# Altium integrated library StudentsLibrary.IntLib: 806 symbols (part 7 of 10)
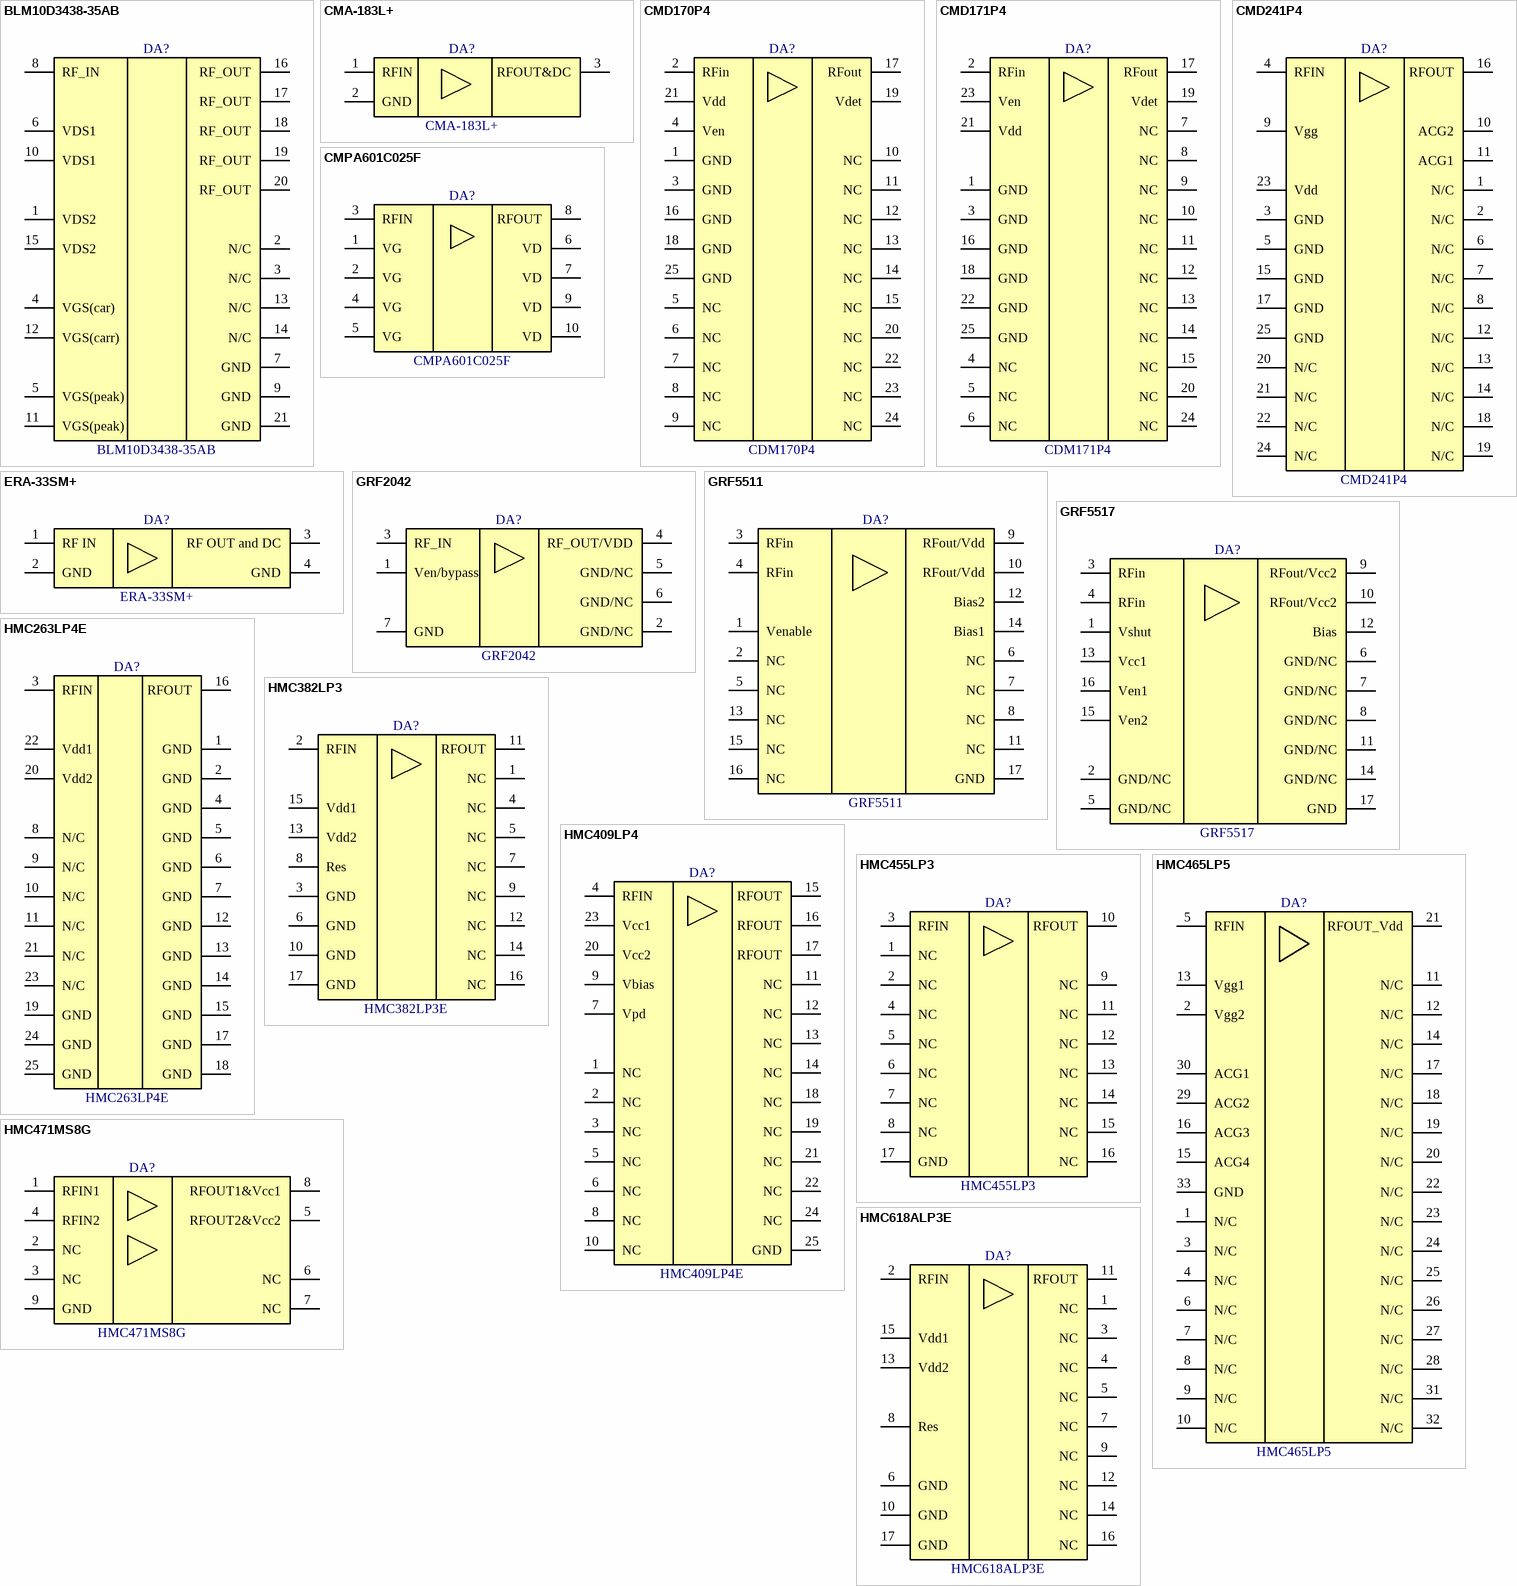
[diagram p53: symbols BLM10D3438-35AB to HMC618ALP3E]

## CMD241P4
designator DA?
2 - 22 GHz (C, X, Ku and K Band) Distributed Amplifier; Manufacturer: Qorvo; PartNumber: CMD241P4; ComponentLink1Description: Product Page; ComponentLink1URL: https://www.qorvo.com/products/p/CMD241P4; ComponentLink2Description: DataSheet; ComponentLink2URL: https://www.qorvo.com/products/d/da007534
footprint QFN25P50_400X400X100L40X24T245N (Quad Flat No-Lead (QFN with Tab), 0.50 mm pitch; square, 6 pin X 6 pin, 4.00 mm L X 4.00 mm W X 1.00 mm H body)
pins: 1 N/C, 2 N/C, 3 GND, 4 RFIN, 5 GND, 6 N/C, 7 N/C, 8 N/C, 9 Vgg, 10 ACG2, 11 ACG1, 12 N/C, 13 N/C, 14 N/C, 15 GND, 16 RFOUT, 17 GND, 18 N/C, 19 N/C, 20 N/C, 21 N/C, 22 N/C, 23 Vdd, 24 N/C, 25 GND

## CMPA601C025F
designator DA?
GaN High Power Amplifier, 40 W 6 - 12 GHz; Manufacturer: MACOM; PartNumber: CMPA601C025F; ComponentLink1Description: ProductPage; ComponentLink1URL: https://www.macom.com/products/product-detail/CMPA601C025; ComponentLink2Description: DataSheet; ComponentLink2URL: https://cdn.macom.com/datasheets/CMPA601C025F.pdf
footprint CMPA601C025F (Flange)
pins: 1 VG, 2 VG, 3 RFIN, 4 VG, 5 VG, 6 VD, 7 VD, 8 RFOUT, 9 VD, 10 VD

## ERA-33SM+
designator DA?
Surface Mount Monolithic Amplifier DC-3 GHz; Manufacturer: Mini-Circuits; PartNumber: ERA-33SM+; ComponentLink1Description: Product Page; ComponentLink1URL: https://www.minicircuits.com/WebStore/dashboard.html?model=ERA-33SM%2B; ComponentLink2Description: DataSheet; ComponentLink2URL: https://www.minicircuits.com/WebStore/dashboardPdf?model=ERA-33SM%2B
footprint WW107 (Mini-Circuits case WW107)
pins: 1 RF IN, 2 GND, 3 RF OUT and DC, 4 GND

## GRF2042
designator DA?
LINEAR GAIN BLOCK WITH BYPASS 0.15 to 6 GHz; Manufacturer: Guerilla RF; PartNumber: GRF2042; ComponentLink1Description: Product Page; ComponentLink1URL: https://www.guerrilla-rf.com/products/detail/sku/GRF2042; ComponentLink2Description: DataSheet; ComponentLink2URL: https://www.guerrilla-rf.com/products/DataSheet?sku=2042&file_name=GRF2042DS.pdf
footprint GRF2042 (DFN 6 1.5x1.5mm Guerilla RF)
pins: 1 Ven/bypass, 2 GND/NC, 3 RF_IN, 4 RF_OUT/VDD, 5 GND/NC, 6 GND/NC, 7 GND

## GRF5511
designator DA?
High Linearity Power Amplifier Tuning Range: 0.7 to 6 GHz; Manufacturer: Guerrilla-RF; ComponentLink1Description: Product Page; ComponentLink1URL: https://www.guerrilla-rf.com/products/detail/sku/GRF5511; PartNumber: GRF5511; ComponentLink2Description: DataSheet; ComponentLink2URL: https://www.guerrilla-rf.com/products/DataSheet?sku=5511&file_name=GRF5511DS.pdf
footprint GRF5511 (Guerrilla-RF 3.0 mm QFN-16)
pins: 1 Venable, 2 NC, 3 RFin, 4 RFin, 5 NC, 6 NC, 7 NC, 8 NC, 9 RFout/Vdd, 10 RFout/Vdd, 11 NC, 12 Bias2, 13 NC, 14 Bias1, 15 NC, 16 NC, 17 GND

## GRF5517
designator DA?
High Linearity Power Amplifier Tuning Range: 1.7 to 1.8 GHz; Manufacturer: Guerrilla-RF; ComponentLink1Description: Product Page; ComponentLink1URL: https://www.guerrilla-rf.com/products/detail/sku/GRF5517; PartNumber: GRF5517; ComponentLink2Description: DataSheet; ComponentLink2URL: https://www.guerrilla-rf.com/products/DataSheet?sku=5517&file_name=GRF5517DS.pdf
footprint GRF5517 (Guerrilla-RF 3.0 mm QFN-16)
pins: 1 Vshut, 2 GND/NC, 3 RFin, 4 RFin, 5 GND/NC, 6 GND/NC, 7 GND/NC, 8 GND/NC, 9 RFout/Vcc2, 10 RFout/Vcc2, 11 GND/NC, 12 Bias, 13 Vcc1, 14 GND/NC, 15 Ven2, 16 Ven1, 17 GND

## HMC263LP4E
designator DA?
GaAs MMIC LOW NOISE AMPLIFIER, 24 - 36 GHz; Manufacturer: Analog Devices; ComponentLink1Description: Product Page; ComponentLink1URL: https://www.analog.com/en/products/hmc263lp4e.html; PartNumber: HMC263LP4E; ComponentLink2Description: DataSheet; ComponentLink2URL: https://www.analog.com/media/en/technical-documentation/data-sheets/hmc263.pdf
footprint QFN25P50_400X400X90L40X25T270N (Quad Flat No-Lead (QFN with Tab), 0.50 mm pitch; square, 6 pin X 6 pin, 4.00 mm L X 4.00 mm W X 0.90 mm H body)
pins: 1 GND, 2 GND, 3 RFIN, 4 GND, 5 GND, 6 GND, 7 GND, 8 N/C, 9 N/C, 10 N/C, 11 N/C, 12 GND, 13 GND, 14 GND, 15 GND, 16 RFOUT, 17 GND, 18 GND, 19 GND, 20 Vdd2, 21 N/C, 22 Vdd1, 23 N/C, 24 GND, 25 GND

## HMC382LP3
designator DA?, comment HMC382LP3E
LOW NOISE AMPLIFIER, 1.7 - 2.2 GHz; Manufacturer: Analog Devices; PartNumber: HMC382LP3E; ComponentLink1Description: Product Page; ComponentLink1URL: https://www.analog.com/en/products/hmc382.html; ComponentLink2Description: DataSheet; ComponentLink2URL: https://www.analog.com/media/en/technical-documentation/data-sheets/hmc382.pdf
footprint QFN17P50_300X300X100L40X24T173N (Quad Flat No-Lead (QFN with Tab), 0.50 mm pitch; square, 4 pin X 4 pin, 3.00 mm L X 3.00 mm W X 1.00 mm H body)
pins: 1 NC, 2 RFIN, 3 GND, 4 NC, 5 NC, 6 GND, 7 NC, 8 Res, 9 NC, 10 GND, 11 RFOUT, 12 NC, 13 Vdd2, 14 NC, 15 Vdd1, 16 NC, 17 GND

## HMC409LP4
designator DA?, comment HMC409LP4E
GaAs InGaP HBT 1 WATT POWER AMPLIFIER, 3.3 - 3.8 GHz; Manufacturer: Analog Devices; PartNumber: HMC409LP4E; ComponentLink1Description: Product Page; ComponentLink1URL: https://www.analog.com/en/products/hmc409.html; ComponentLink2Description: DataSheet; ComponentLink2URL: https://www.analog.com/media/en/technical-documentation/data-sheets/hmc409.pdf
footprint QFN25P50_400X400X100L40X24T280N (Quad Flat No-Lead (QFN with Tab), 0.50 mm pitch; square, 6 pin X 6 pin, 4.00 mm L X 4.00 mm W X 1.00 mm H body)
pins: 1 NC, 2 NC, 3 NC, 4 RFIN, 5 NC, 6 NC, 7 Vpd, 8 NC, 9 Vbias, 10 NC, 11 NC, 12 NC, 13 NC, 14 NC, 15 RFOUT, 16 RFOUT, 17 RFOUT, 18 NC, 19 NC, 20 Vcc2, 21 NC, 22 NC, 23 Vcc1, 24 NC, 25 GND

## HMC455LP3
designator DA?
InGaP HBT ½ Watt High IP3 AMPLIFIER, 1.7 - 2.5 GHz; Manufacturer: Analog Devices; PartNumber: HMC455LP3; ComponentLink1Description: Product Page; ComponentLink1URL: https://www.analog.com/en/products/hmc455.html; ComponentLink2Description: DataSheet; ComponentLink2URL: https://www.analog.com/media/en/technical-documentation/data-sheets/hmc455.pdf
footprint QFN17P50_300X300X100L40X24T173N (Quad Flat No-Lead (QFN with Tab), 0.50 mm pitch; square, 4 pin X 4 pin, 3.00 mm L X 3.00 mm W X 1.00 mm H body)
pins: 1 NC, 2 NC, 3 RFIN, 4 NC, 5 NC, 6 NC, 7 NC, 8 NC, 9 NC, 10 RFOUT, 11 NC, 12 NC, 13 NC, 14 NC, 15 NC, 16 NC, 17 GND

## HMC465LP5
designator DA?
GaAs PHEMT MMIC MODULATOR DRIVER  AMPLIFIER, DC - 20 GHz; Manufacturer: Analog Devices; PartNumber: HMC465LP5; ComponentLink1Description: Product Page; ComponentLink1URL: https://www.analog.com/en/products/hmc465lp5.html; ComponentLink2Description: DataSheet; ComponentLink2URL: https://www.analog.com/media/en/technical-documentation/data-sheets/hmc465.pdf
footprint QFN33P50_500X500X90L40X25T370N (Quad Flat No-Lead (QFN with Tab), 0.50 mm pitch; square, 8 pin X 8 pin, 5.00 mm L X 5.00 mm W X 0.90 mm H body)
pins: 1 N/C, 2 Vgg2, 3 N/C, 4 N/C, 5 RFIN, 6 N/C, 7 N/C, 8 N/C, 9 N/C, 10 N/C, 11 N/C, 12 N/C, 13 Vgg1, 14 N/C, 15 ACG4, 16 ACG3, 17 N/C, 18 N/C, 19 N/C, 20 N/C, 21 RFOUT_Vdd, 22 N/C, 23 N/C, 24 N/C, 25 N/C, 26 N/C, 27 N/C, 28 N/C, 29 ACG2, 30 ACG1, 31 N/C, 32 N/C, 33 GND

## HMC471MS8G
designator DA?
SiGe HBT DUAL CHANNEL GAIN BLOCK MMIC AMPLIFIER, DC - 5 GHz; Manufacturer: Analog Devices; PartNumber: HMC471MS8G; ComponentLink1Description: Product Page; ComponentLink1URL: https://www.analog.com/en/products/hmc471.html; ComponentLink2Description: DataSheet; ComponentLink2URL: https://www.analog.com/media/en/technical-documentation/data-sheets/hmc471.pdf
footprint SOP9P65_300X488X110L60X30T241X178N (Small Outline Pkg (SOP with Tab), 0.65 mm pitch; 8 pin, 3.00 mm L X 3.00 mm W X 1.10 mm H body)
pins: 1 RFIN1, 2 NC, 3 NC, 4 RFIN2, 5 RFOUT2&Vcc2, 6 NC, 7 NC, 8 RFOUT1&Vcc1, 9 GND

## HMC618ALP3E
designator DA?
GaAs SMT pHEMT LOW NOISE AMPLIFIER, 1.2 - 2.2 GHz; Manufacturer: Analog Devices; PartNumber: HMC618ALP3E; ComponentLink1Description: Product Page; ComponentLink1URL: https://www.analog.com/en/products/hmc618a.html; ComponentLink2Description: DataSheet; ComponentLink2URL: https://www.analog.com/media/en/technical-documentation/data-sheets/hmc618a.pdf
footprint QFN17P50_300X300X100L40X24T173N (Quad Flat No-Lead (QFN with Tab), 0.50 mm pitch; square, 4 pin X 4 pin, 3.00 mm L X 3.00 mm W X 1.00 mm H body)
pins: 1 NC, 2 RFIN, 3 NC, 4 NC, 5 NC, 6 GND, 7 NC, 8 Res, 9 NC, 10 GND, 11 RFOUT, 12 NC, 13 Vdd2, 14 NC, 15 Vdd1, 16 NC, 17 GND

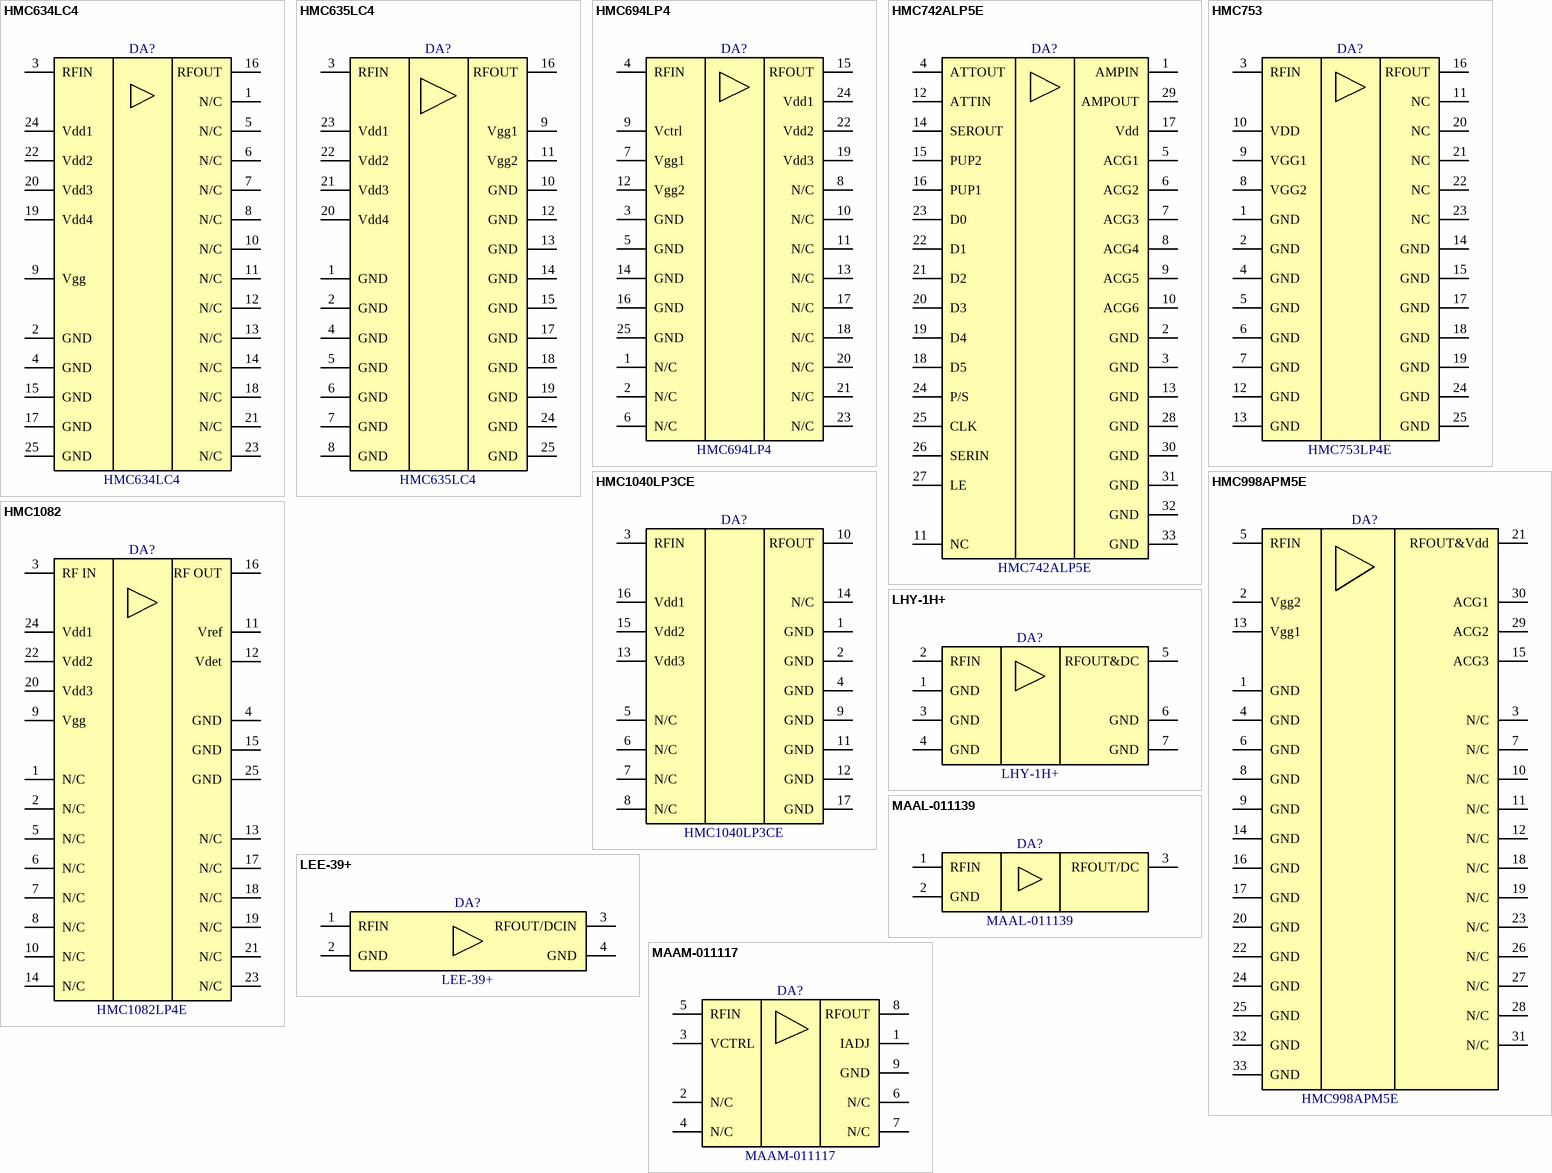
[diagram p29: symbols HMC634LC4 to MAAM-011117]

## HMC634LC4
designator DA?
GaAs PHEMT MMIC DRIVER AMPLIFIER, 5 - 20 GHz; Manufacturer: Analog Devices; PartNumber: HMC634LC4; ComponentLink1Description: Product Page; ComponentLink1URL: https://www.analog.com/en/products/hmc634lc4.html; ComponentLink2Description: DataSheet; ComponentLink2URL: https://www.analog.com/media/en/technical-documentation/data-sheets/hmc634.pdf
footprint QFN25P50_400X400X100L40X24T245N (Quad Flat No-Lead (QFN with Tab), 0.50 mm pitch; square, 6 pin X 6 pin, 4.00 mm L X 4.00 mm W X 1.00 mm H body)
pins: 1 N/C, 2 GND, 3 RFIN, 4 GND, 5 N/C, 6 N/C, 7 N/C, 8 N/C, 9 Vgg, 10 N/C, 11 N/C, 12 N/C, 13 N/C, 14 N/C, 15 GND, 16 RFOUT, 17 GND, 18 N/C, 19 Vdd4, 20 Vdd3, 21 N/C, 22 Vdd2, 23 N/C, 24 Vdd1, 25 GND

## HMC635LC4
designator DA?
GaAs PHEMT MMIC DRIVER AMPLIFIER, 18 - 40 GHz; Manufacturer: Analog Devices; PartNumber: HMC635LC4; ComponentLink1Description: Product Page; ComponentLink1URL: https://www.analog.com/en/products/hmc635lc4.html; ComponentLink2Description: DataSheet; ComponentLink2URL: https://www.analog.com/media/en/technical-documentation/data-sheets/hmc635.pdf
footprint QFN25P50_400X400X100L40X24T260N (Quad Flat No-Lead (QFN with Tab), 0.50 mm pitch; square, 6 pin X 6 pin, 4.00 mm L X 4.00 mm W X 1.00 mm H body)
pins: 1 GND, 2 GND, 3 RFIN, 4 GND, 5 GND, 6 GND, 7 GND, 8 GND, 9 Vgg1, 10 GND, 11 Vgg2, 12 GND, 13 GND, 14 GND, 15 GND, 16 RFOUT, 17 GND, 18 GND, 19 GND, 20 Vdd4, 21 Vdd3, 22 Vdd2, 23 Vdd1, 24 GND, 25 GND

## HMC694LP4
designator DA?
GaAs MMIC ANALOG VARIABLE GAIN AMPLIFIER, 6 - 17 GHz; Manufacturer: Analog Devices; PartNumber: HMC694LP4; ComponentLink1Description: Product Page; ComponentLink1URL: https://www.analog.com/en/products/hmc694lp4.html; ComponentLink2Description: DataSheet; ComponentLink2URL: https://www.analog.com/media/en/technical-documentation/data-sheets/hmc694lp4.pdf
footprint QFN25P50_400X400X100L40X24T280N (Quad Flat No-Lead (QFN with Tab), 0.50 mm pitch; square, 6 pin X 6 pin, 4.00 mm L X 4.00 mm W X 1.00 mm H body)
pins: 1 N/C, 2 N/C, 3 GND, 4 RFIN, 5 GND, 6 N/C, 7 Vgg1, 8 N/C, 9 Vctrl, 10 N/C, 11 N/C, 12 Vgg2, 13 N/C, 14 GND, 15 RFOUT, 16 GND, 17 N/C, 18 N/C, 19 Vdd3, 20 N/C, 21 N/C, 22 Vdd2, 23 N/C, 24 Vdd1, 25 GND

## HMC742ALP5E
designator DA?
0.5 dB LSB GaAs MMIC 6-BIT DIGITAL VARIABLE GAIN AMPLIFIER, 70 MHz - 4 GHz; Manufacturer: Analog Devices; PartNumber: HMC742ALP5E; ComponentLink1Description: Product Page; ComponentLink1URL: https://www.analog.com/en/products/hmc742a.html; ComponentLink2Description: DataSheet; ComponentLink2URL: https://www.analog.com/media/en/technical-documentation/data-sheets/hmc742a.pdf
footprint QFN33P50_500X500X100L40X24T380N (Quad Flat No-Lead (QFN with Tab), 0.50 mm pitch; square, 8 pin X 8 pin, 5.00 mm L X 5.00 mm W X 1.00 mm H body)
pins: 1 AMPIN, 2 GND, 3 GND, 4 ATTOUT, 5 ACG1, 6 ACG2, 7 ACG3, 8 ACG4, 9 ACG5, 10 ACG6, 11 NC, 12 ATTIN, 13 GND, 14 SEROUT, 15 PUP2, 16 PUP1, 17 Vdd, 18 D5, 19 D4, 20 D3, 21 D2, 22 D1, 23 D0, 24 P/S, 25 CLK, 26 SERIN, 27 LE, 28 GND, 29 AMPOUT, 30 GND, 31 GND, 32 GND, 33 GND

## HMC753
designator DA?, comment HMC753LP4E
1 GHz to 11 GHz, GaAs, HEMT, MMIC Low Noise Amplifier; Manufacturer: Analog Devices; PartNumber: HMC753LP4E; ComponentLink1Description: Product Page; ComponentLink1URL: https://www.analog.com/en/products/hmc753.html; ComponentLink2Description: DataSheet; ComponentLink2URL: https://www.analog.com/media/en/technical-documentation/data-sheets/hmc753.pdf
footprint QFN25P50_400X400X95L40X25T270N (Quad Flat No-Lead (QFN with Tab), 0.50 mm pitch; square, 6 pin X 6 pin, 4.00 mm L X 4.00 mm W X 0.95 mm H body)
pins: 1 GND, 2 GND, 3 RFIN, 4 GND, 5 GND, 6 GND, 7 GND, 8 VGG2, 9 VGG1, 10 VDD, 11 NC, 12 GND, 13 GND, 14 GND, 15 GND, 16 RFOUT, 17 GND, 18 GND, 19 GND, 20 NC, 21 NC, 22 NC, 23 NC, 24 GND, 25 GND

## HMC998APM5E
designator DA?
GaAs pHEMT MMIC 2 WATT POWER AMPLIFIER, DC - 22 GHz; Manufacturer: Analog Devices; PartNumber: HMC998APM5E; ComponentLink1Description: Product Page; ComponentLink1URL: https://www.analog.com/en/products/hmc998apm5e.html; ComponentLink2Description: DataSheet; ComponentLink2URL: https://www.analog.com/media/en/technical-documentation/data-sheets/hmc998apm5e.pdf
footprint QFN50P500X500X135_HS-33N (QFN, 32-Leads, Body 5.00x5.00mm, Pitch 0.50mm, Thermal Pad 3.10x3.10mm, IPC Medium Density)
pins: 1 GND, 2 Vgg2, 3 N/C, 4 GND, 5 RFIN, 6 GND, 7 N/C, 8 GND, 9 GND, 10 N/C, 11 N/C, 12 N/C, 13 Vgg1, 14 GND, 15 ACG3, 16 GND, 17 GND, 18 N/C, 19 N/C, 20 GND, 21 RFOUT&Vdd, 22 GND, 23 N/C, 24 GND, 25 GND, 26 N/C, 27 N/C, 28 N/C, 29 ACG2, 30 ACG1, 31 N/C, 32 GND, 33 GND

## HMC1040LP3CE
designator DA?
GaAs pHEMT MMIC LOW NOISE AMPLIFIER, 24 - 43.5 GHz; Manufacturer: Analog Devices; PartNumber: HMC1040LP3CE; ComponentLink1Description: Product Page; ComponentLink1URL: https://www.analog.com/en/products/hmc1040lp3ce.html; ComponentLink2Description: DataSheet; ComponentLink2URL: https://www.analog.com/media/en/technical-documentation/data-sheets/hmc1040.pdf
footprint QFN17P50_300X300X100L40X24T170N (Quad Flat No-Lead (QFN with Tab), 0.50 mm pitch; square, 4 pin X 4 pin, 3.00 mm L X 3.00 mm W X 1.00 mm H body)
pins: 1 GND, 2 GND, 3 RFIN, 4 GND, 5 N/C, 6 N/C, 7 N/C, 8 N/C, 9 GND, 10 RFOUT, 11 GND, 12 GND, 13 Vdd3, 14 N/C, 15 Vdd2, 16 Vdd1, 17 GND

## HMC1082
designator DA?, comment HMC1082LP4E
Power Amplifier 5.5-18 GHz, Gain 22 dB, P1dBout 24 dBm; Manufacturer: Analog Devices; PartNumber: HMC1082LP4E; ComponentLink1Description: Product Page; ComponentLink1URL: https://www.analog.com/en/products/hmc1082.html; ComponentLink2Description: DataSheet; ComponentLink2URL: https://www.analog.com/media/en/technical-documentation/data-sheets/hmc1082.pdf
footprint QFN25P50_400X400X100L40X24T280N (Quad Flat No-Lead (QFN with Tab), 0.50 mm pitch; square, 6 pin X 6 pin, 4.00 mm L X 4.00 mm W X 1.00 mm H body)
pins: 1 N/C, 2 N/C, 3 RF IN, 4 GND, 5 N/C, 6 N/C, 7 N/C, 8 N/C, 9 Vgg, 10 N/C, 11 Vref, 12 Vdet, 13 N/C, 14 N/C, 15 GND, 16 RF OUT, 17 N/C, 18 N/C, 19 N/C, 20 Vdd3, 21 N/C, 22 Vdd2, 23 N/C, 24 Vdd1, 25 GND

## LEE-39+
designator DA?
Monolithic Amplifier DC-8GHz; Manufacturer: Mini-Circuits; PartNumber: LEE-39+; ComponentLink1Description: Product Page; ComponentLink1URL: https://www.minicircuits.com/WebStore/dashboard.html?model=LEE-39%2B; ComponentLink2Description: DataSheet; ComponentLink2URL: https://www.minicircuits.com/WebStore/dashboardPdf?model=LEE-39%2B
footprint FG873 (Mini-Circuits case FG873)
pins: 1 RFIN, 2 GND, 3 RFOUT/DCIN, 4 GND

## LHY-1H+
designator DA?
SMT Linear Amplifier, 50 - 6000 MHz, 50Ω; Manufacturer: Mini-Circuits; PartNumber: LHY-1H+; ComponentLink1Description: Product Page; ComponentLink1URL: https://www.minicircuits.com/WebStore/dashboard.html?model=LHY-1H%2B; ComponentLink2Description: DataSheet; ComponentLink2URL: https://www.minicircuits.com/WebStore/dashboardPdf?model=LHY-1H%2B
footprint MC1630-1 (Mini-Circuits case MC1630-1)
pins: 1 GND, 2 RFIN, 3 GND, 4 GND, 5 RFOUT&DC, 6 GND, 7 GND

## MAAL-011139
designator DA?
Low Noise Amplifier, 5 - 4000 MHz, 75 Ohm, CATV; Manufacturer: MACOM; PartNumber: MAAL-011139; ComponentLink1Description: Product Page; ComponentLink1URL: https://www.macom.com/products/product-detail/MAAL-011139; ComponentLink2Description: DataSheet; ComponentLink2URL: https://cdn.macom.com/datasheets/MAAL-011139.pdf
footprint MAAL-011139 (SOT89, 3-Leads, Body 4,50x2,50mm, Pitch 1,50mm, Lead Span 3,5mm, IPC Medium Density)
pins: 1 RFIN, 2 GND, 3 RFOUT/DC

## MAAM-011117
designator DA?
75 Ω, 5 V RF Amplifier 50 - 2700 MHz; Manufacturer: MACOM; PartNumber: MAAM-011117; ComponentLink1Description: Product Page; ComponentLink1URL: https://www.macom.com/products/product-detail/MAAM-011117; ComponentLink2Description: DataSheet; ComponentLink2URL: https://cdn.macom.com/datasheets/MAAM-011117.pdf
footprint SON50P200X100_HS-9N (SON, 8-Leads, Body 2.00x2.00mm, Pitch 0.50mm, Thermal Pad 1.70x0.79mm, IPC Medium Density)
pins: 1 IADJ, 2 N/C, 3 VCTRL, 4 N/C, 5 RFIN, 6 N/C, 7 N/C, 8 RFOUT, 9 GND

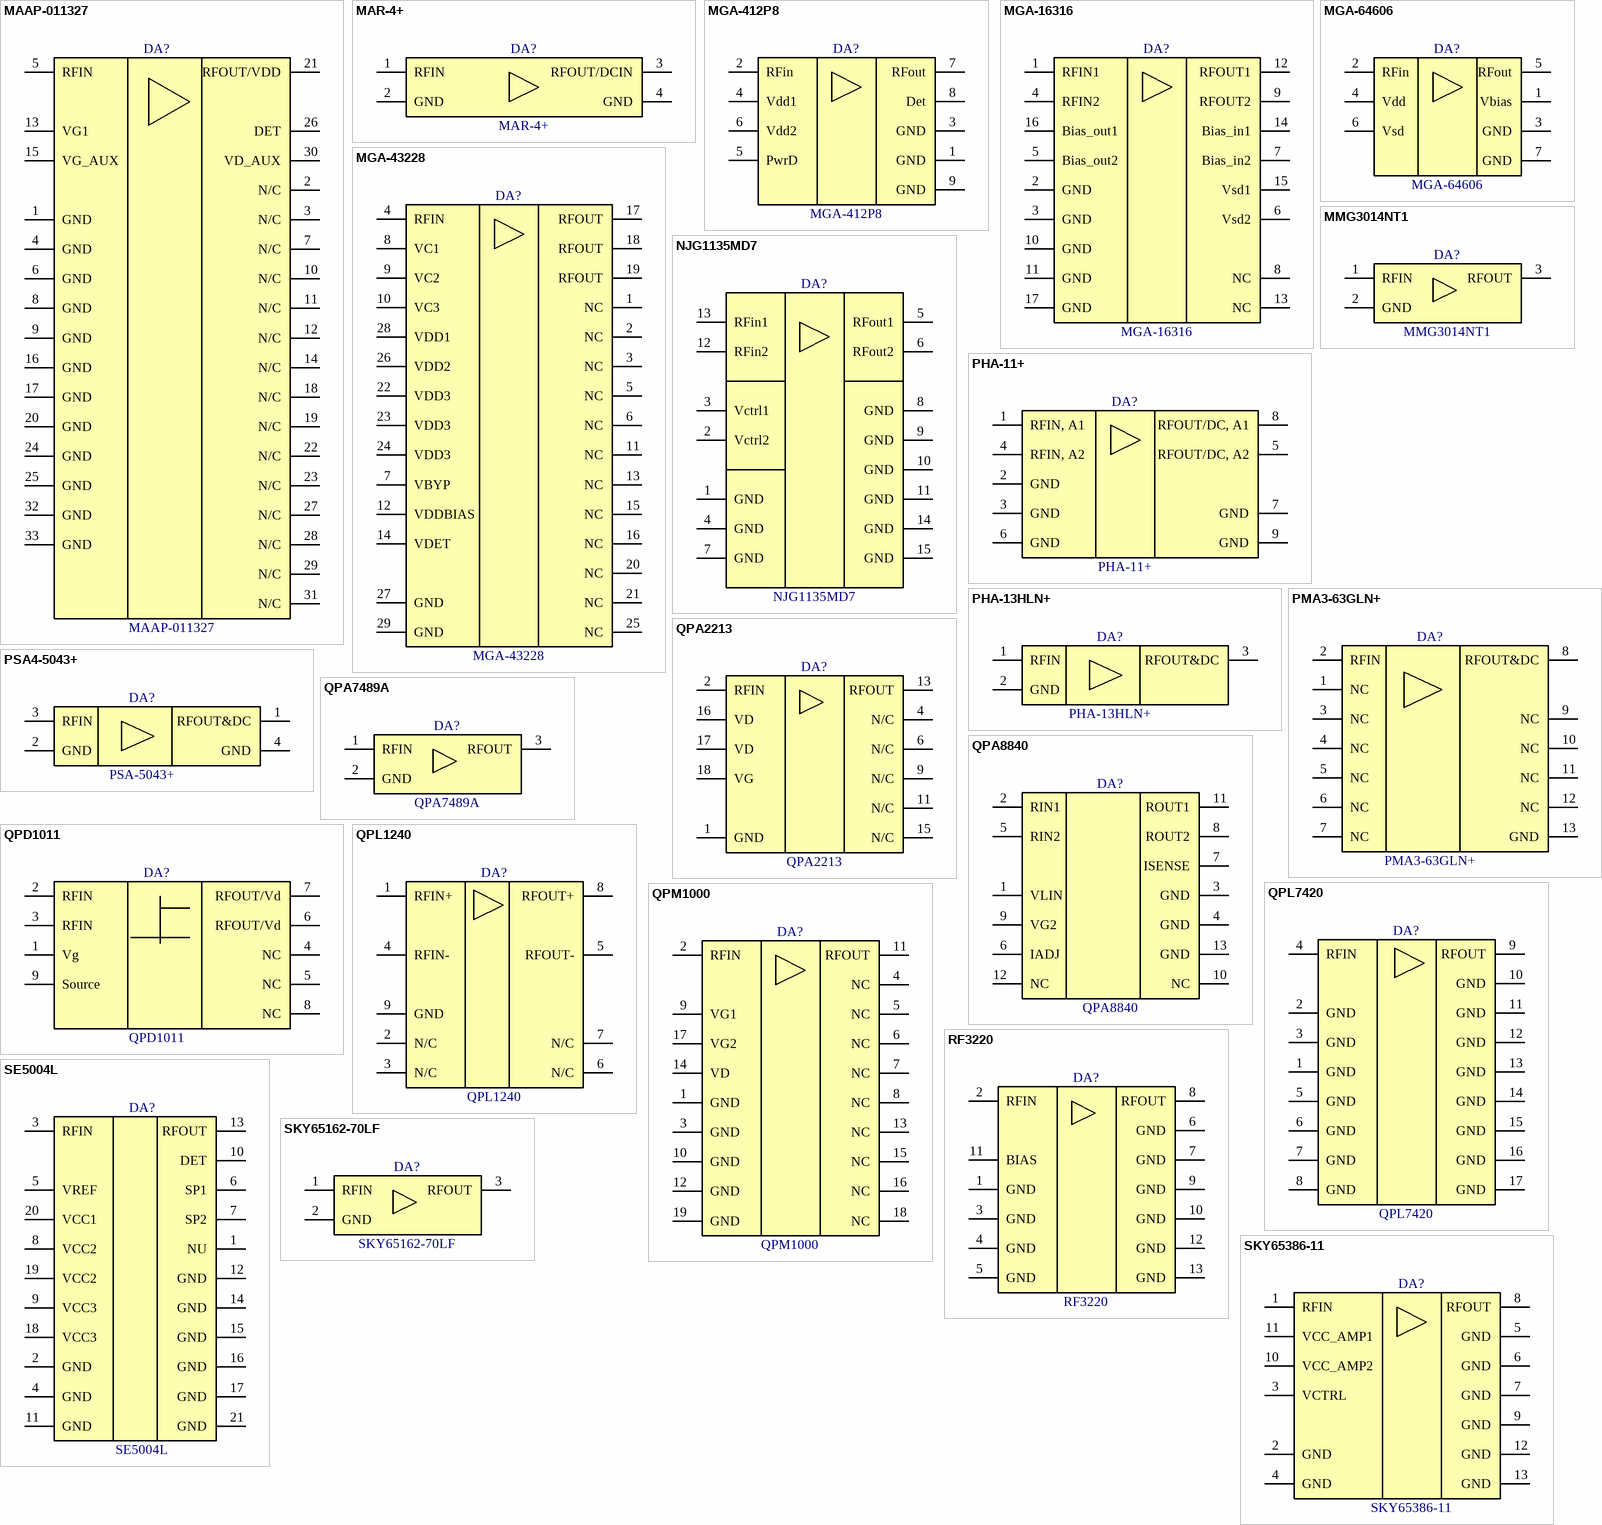
[diagram p30: symbols MAAP-011327 to SKY65386-11]

## MAAP-011327
designator DA?
Power Amplifier, 1 W, 0.001 - 22 GHz; Manufacturer: MACOM; PartNumber: MAAP-011327; ComponentLink1Description: Product Page; ComponentLink1URL: https://www.macom.com/products/product-detail/MAAP-011327; ComponentLink2Description: DataSheet; ComponentLink2URL: https://cdn.macom.com/datasheets/MAAP-011327.pdf
footprint QFN33P50_500X500X120L50X25T300N (Quad Flat No-Lead (QFN with Tab), 0.50 mm pitch; square, 8 pin X 8 pin, 5.00 mm L X 5.00 mm W X 1.20 mm H body)
pins: 1 GND, 2 N/C, 3 N/C, 4 GND, 5 RFIN, 6 GND, 7 N/C, 8 GND, 9 GND, 10 N/C, 11 N/C, 12 N/C, 13 VG1, 14 N/C, 15 VG_AUX, 16 GND, 17 GND, 18 N/C, 19 N/C, 20 GND, 21 RFOUT/VDD, 22 N/C, 23 N/C, 24 GND, 25 GND, 26 DET, 27 N/C, 28 N/C, 29 N/C, 30 VD_AUX, 31 N/C, 32 GND, 33 GND

## MAR-4+
designator DA?
Murata Amplifier DC-1 GHz IP3 25.5 dBm; Manufacturer: Mini-Circuits; PartNumber: MAR-4+; ComponentLink1Description: Product Page; ComponentLink1URL: https://www.minicircuits.com/WebStore/dashboard.html?model=MAR-4%2B; ComponentLink2Description: DataSheet; ComponentLink2URL: https://www.minicircuits.com/WebStore/dashboardPdf?model=MAR-4%2B
footprint MAR-4+ CASE VV105 (Mini-Circuits CASE VV105)
pins: 1 RFIN, 2 GND, 3 RFOUT/DCIN, 4 GND

## MGA-412P8
designator DA?
GaAs Enhancement-mode pHEMT Power Amplifier optimized for IEEE 802.11b/g applications; Manufacturer: Broadcom; PartNumber: MGA-412P8
footprint MGA-412P8 (Small Outline No-Lead (SON with Tab), 0.50 mm pitch; 8 pin, 2.00 mm L X 2.00 mm W X 0.80 mm H body)
pins: 1 GND, 2 RFin, 3 GND, 4 Vdd1, 5 PwrD, 6 Vdd2, 7 RFout, 8 Det, 9 GND

## MGA-16316
designator DA?
Dual LNA for Balanced Application 1950 – 4000 MHz; Manufacturer: Broadcom; PartNumber: MGA-16316
footprint QFN17P65_400X400X95L55X30T210N (Quad Flat No-Lead (QFN with Tab), 0.65 mm pitch; square, 4 pin X 4 pin, 4.00 mm L X 4.00 mm W X 0.95 mm H body)
pins: 1 RFIN1, 2 GND, 3 GND, 4 RFIN2, 5 Bias_out2, 6 Vsd2, 7 Bias_in2, 8 NC, 9 RFOUT2, 10 GND, 11 GND, 12 RFOUT1, 13 NC, 14 Bias_in1, 15 Vsd1, 16 Bias_out1, 17 GND

## MGA-43228
designator DA?
(2.3–2.5) GHz 29dBm High Linearity Wireless Data Power Amplifier; Manufacturer: Broadcom; PartNumber: MGA-43228
footprint QFN29P50_500X500X90L40X25T360N (Quad Flat No-Lead (QFN with Tab), 0.50 mm pitch; square, 7 pin X 7 pin, 5.00 mm L X 5.00 mm W X 0.90 mm H body)
pins: 1 NC, 2 NC, 3 NC, 4 RFIN, 5 NC, 6 NC, 7 VBYP, 8 VC1, 9 VC2, 10 VC3, 11 NC, 12 VDDBIAS, 13 NC, 14 VDET, 15 NC, 16 NC, 17 RFOUT, 18 RFOUT, 19 RFOUT, 20 NC, 21 NC, 22 VDD3, 23 VDD3, 24 VDD3, 25 NC, 26 VDD2, 27 GND, 28 VDD1, 29 GND

## MGA-64606
designator DA?
Low Noise Amplifi er with switchable Bypass/Shutdown Mode in Low Profi le Package; Manufacturer: Broadcom; PartNumber: MGA-64606
footprint PSON7P50_130X200X55L25X25T110N (Pullback Small Outline No-Lead (PSON with Tab), 0.50 mm pitch; 6 pin, 1.30 mm L X 2.00 mm W X 0.55 mm H body)
pins: 1 Vbias, 2 RFin, 3 GND, 4 Vdd, 5 RFout, 6 Vsd, 7 GND

## MMG3014NT1
designator DA?
Heterojunction Bipolar Transistor  Technology (InGaP HBT) Broadband High Linearity Amplifier; Manufacturer: NXP; PartNumber: MMG3014NT1; ComponentLink1Description: Product Page; ComponentLink1URL: https://www.nxp.com/part/MMG3014N#/; ComponentLink2Description: DataSheet; ComponentLink2URL: https://www.nxp.com/docs/en/data-sheet/MMG3014NT1.pdf
footprint SOT89-150P415X160-3N (SOT89, 3-Leads, Body 4.50x2.50mm, Pitch 1.50mm, Lead Span 4.1mm, IPC Medium Density)
pins: 1 RFIN, 2 GND, 3 RFOUT

## NJG1135MD7
designator DA?
Dual Band LNA; Manufacturer: Nisshinbo; PartNumber: NJG1135MD7; ComponentLink1Description: Product Page; ComponentLink1URL: https://www.nisshinbo-microdevices.co.jp/en/products/low-noise-amplifier/spec/?product=njg1135md7; ComponentLink2Description: DataSheet; ComponentLink2URL: https://www.nisshinbo-microdevices.co.jp/en/pdf/datasheet/NJG1135MD7_E.pdf
footprint NJG1135MD7
pins: 1 GND, 2 Vctrl2, 3 Vctrl1, 4 GND, 5 RFout1, 6 RFout2, 7 GND, 8 GND, 9 GND, 10 GND, 11 GND, 12 RFin2, 13 RFin1, 14 GND, 15 GND

## PHA-11+
designator DA?
Dual Matched Amplifier 50Ω .05 to 3 GHz; Manufacturer: Mini-Circuits; PartNumber: PHA-11+; ComponentLink1Description: Product Page; ComponentLink1URL: https://www.minicircuits.com/WebStore/dashboard.html?model=PHA-11%2B; ComponentLink2Description: DataSheet; ComponentLink2URL: https://www.minicircuits.com/WebStore/dashboardPdf?model=PHA-11%2B
footprint DL1020 (Mini-Circuits case DL1020)
pins: 1 RFIN, A1, 2 GND, 3 GND, 4 RFIN, A2, 5 RFOUT/DC, A2, 6 GND, 7 GND, 8 RFOUT/DC, A1, 9 GND

## PHA-13HLN+
designator DA?
Ultra High Dynamic RangeMonolithic Amplifier 50Ω 1MHz to 1 GHz; Manufacturer: Mini-Circuits; PartNumber: PHA-13HLN+; ComponentLink1Description: Product Page; ComponentLink1URL: https://www.minicircuits.com/WebStore/dashboard.html?model=PHA-13LN%2B; ComponentLink2Description: DataSheet; ComponentLink2URL: https://www.minicircuits.com/WebStore/dashboardPdf?model=PHA-13HLN%2B
footprint DF782 (Mini-Circuits case DF782)
pins: 1 RFIN, 2 GND, 3 RFOUT&DC

## PMA3-63GLN+
designator DA?
SMT Low Noise Amplifier, 1800 - 6000 MHz, 50Ω; Manufacturer: Mini-Circuits; PartNumber: PMA3-63GLN+; ComponentLink1Description: Product Page; ComponentLink1URL: https://www.minicircuits.com/WebStore/dashboard.html?model=PMA3-63GLN%2B; ComponentLink2Description: DataSheet; ComponentLink2URL: https://www.minicircuits.com/WebStore/dashboardPdf?model=PMA3-63GLN%2B
footprint QFN13P51_300X300X99L41X23T145N (Quad Flat No-Lead (QFN with Tab), 0.51 mm pitch; square, 3 pin X 3 pin, 3.00 mm L X 3.00 mm W X 0.99 mm H body)
pins: 1 NC, 2 RFIN, 3 NC, 4 NC, 5 NC, 6 NC, 7 NC, 8 RFOUT&DC, 9 NC, 10 NC, 11 NC, 12 NC, 13 GND

## PSA4-5043+
designator DA?, comment PSA-5043+
LOW NOISE, HIGH IP3, Monolithic Amplifier, 50Ω 0.05 to 4 GHz; Manufacturer: Mini-Circuits; PartNumber: PSA-5043+; ComponentLink1Description: Product Page; ComponentLink1URL: https://www.minicircuits.com/WebStore/dashboard.html?model=PSA4-5043%2B; ComponentLink2Description: DataSheet; ComponentLink2URL: https://www.minicircuits.com/WebStore/dashboardPdf?model=PSA4-5043%2B
footprint MMM1362 (Mini-Circuits CASE MMM1362)
pins: 1 RFOUT&DC, 2 GND, 3 RFIN, 4 GND

## QPA2213
designator DA?
2 – 20 GHz 2 Watt GaN Amplifier; Manufacturer: Qorvo; PartNumber: QPA2213; ComponentLink1Description: Product Page; ComponentLink1URL: https://www.qorvo.com/products/p/QPA2213; ComponentLink2Description: DataSheet; ComponentLink2URL: https://www.qorvo.com/products/d/da006580
footprint QPA2213 (Cu Based 4.5x4.5 Lamibate Package)
pins: 1 GND, 2 RFIN, 4 N/C, 6 N/C, 9 N/C, 11 N/C, 13 RFOUT, 15 N/C, 16 VD, 17 VD, 18 VG

## QPA7489A
designator DA?
DC – 3500 MHz Cascadable SiGe HBT Amplifier; Manufacturer: Qorvo; PartNumber: QPA7489A; ComponentLink1Description: Product Page; ComponentLink1URL: https://www.qorvo.com/products/p/QPA7489A; ComponentLink2Description: DataSheet; ComponentLink2URL: https://www.qorvo.com/products/d/da000268
footprint SOT89-150P355X160-3N (SOT89, 3-Leads, Body 4.50x2.50mm, Pitch 1.50mm, Lead Span 3.5mm, IPC Medium Density)
pins: 1 RFIN, 2 GND, 3 RFOUT

## QPA8840
designator DA?
50 - 1800 MHz, 22 dB Gain, 12 V, CATV Amplifier; Manufacturer: Qorvo; PartNumber: QPA8840; ComponentLink1Description: Product Page; ComponentLink1URL: https://www.qorvo.com/products/p/QPA8840; ComponentLink2Description: DataSheet; ComponentLink2URL: https://www.qorvo.com/products/d/da008264
footprint QPA8840 (SON, 12-Leads, Body 6.00x6.00mm, Pitch 1.00mm, Thermal Pad 5.30x4.35mm, IPC Medium Density)
pins: 1 VLIN, 2 RIN1, 3 GND, 4 GND, 5 RIN2, 6 IADJ, 7 ISENSE, 8 ROUT2, 9 VG2, 10 NC, 11 ROUT1, 12 NC, 13 GND

## QPD1011
designator DA?
30 – 1200 MHz, 50 V, 7 W GaN RF Input-Matched Transistor; Manufacturer: Qorvo; PartNumber: QPD1011; ComponentLink1Description: Product Page; ComponentLink1URL: https://www.qorvo.com/products/p/QPD1011; ComponentLink2Description: DataSheet; ComponentLink2URL: https://www.qorvo.com/products/d/da006136
footprint SON9P127_500X600X90L59X63T444X396N (Small Outline No-Lead (SON with Tab), 1.27 mm pitch; 8 pin, 5.00 mm L X 6.00 mm W X 0.90 mm H body)
pins: 1 Vg, 2 RFIN, 3 RFIN, 4 NC, 5 NC, 6 RFOUT/Vd, 7 RFOUT/Vd, 8 NC, 9 Source

## QPL1240
designator DA?
5 - 1218 MHz, 17 dB Gain Differential CATV Amplifier; Manufacturer: Qorvo; PartNumber: QPL1240; ComponentLink1Description: Product Page; ComponentLink1URL: https://www.qorvo.com/products/p/QPL1240; ComponentLink2Description: DataSheet; ComponentLink2URL: https://www.qorvo.com/products/d/da008515
footprint SOIC9P127_490X600X173L75X42T330X240N (Small Outline IC (SOIC with Tab), 1.27 mm pitch; 8 pin, 4.90 mm L X 3.905 mm W X 1.73 mm H body)
pins: 1 RFIN+, 2 N/C, 3 N/C, 4 RFIN-, 5 RFOUT-, 6 N/C, 7 N/C, 8 RFOUT+, 9 GND

## QPL7420
designator DA?
75 Ω 20 dB CATV Amplifier 5 – 1800 MHz; Manufacturer: Qorvo; PartNumber: QPL7420; ComponentLink1Description: Product Page; ComponentLink1URL: https://www.qorvo.com/products/p/QPL7420; ComponentLink2Description: DataSheet; ComponentLink2URL: https://www.qorvo.com/products/d/da008608
footprint QFN17P50_300X300X90L30X25T170N (Quad Flat No-Lead (QFN with Tab), 0.50 mm pitch; square, 4 pin X 4 pin, 3.00 mm L X 3.00 mm W X 0.90 mm H body)
pins: 1 GND, 2 GND, 3 GND, 4 RFIN, 5 GND, 6 GND, 7 GND, 8 GND, 9 RFOUT, 10 GND, 11 GND, 12 GND, 13 GND, 14 GND, 15 GND, 16 GND, 17 GND

## QPM1000
designator DA?
2 -20 GHz Limiter/Low-Noise Amplifier; Manufacturer: Qorvo; PartNumber: QPM1000; ComponentLink1Description: Product Page; ComponentLink1URL: https://www.qorvo.com/products/p/QPM1000; ComponentLink2Description: DataSheet; ComponentLink2URL: https://www.qorvo.com/products/d/da003672
footprint QPM1000
pins: 1 GND, 2 RFIN, 3 GND, 4 NC, 5 NC, 6 NC, 7 NC, 8 NC, 9 VG1, 10 GND, 11 RFOUT, 12 GND, 13 NC, 14 VD, 15 NC, 16 NC, 17 VG2, 18 NC, 19 GND

## RF3220
designator DA?
LOW NOISE, LINEAR AMPLIFIER  HIGH LINEARITY/DRIVER AMPLIFIER; Manufacturer: Qorvo; PartNumber: RF3220; ComponentLink1Description: Product Page; ComponentLink1URL: https://www.qorvo.com/products/p/RF3220; ComponentLink2Description: DataSheet; ComponentLink2URL: https://www.qorvo.com/products/d/da000424
footprint RF3220 (RFMD RF3220)
pins: 1 GND, 2 RFIN, 3 GND, 4 GND, 5 GND, 6 GND, 7 GND, 8 RFOUT, 9 GND, 10 GND, 11 BIAS, 12 GND, 13 GND

## SE5004L
designator DA?
5 GHz, 26dBm Power Amplifier with Power Detector; Manufacturer: Skyworks; PartNumber: SE5004L; ComponentLink1Description: Product Page; ComponentLink1URL: https://www.skyworksinc.com/en/Products/Amplifiers/SE5004L; ComponentLink2Description: DataSheet; ComponentLink2URL: https://www.skyworksinc.com/-/media/SkyWorks/Documents/Products/601-700/SE5004L_202393B.pdf
footprint QFN21P50_400X400X90L50X25T250N (Quad Flat No-Lead (QFN with Tab), 0.50 mm pitch; square, 5 pin X 5 pin, 4.00 mm L X 4.00 mm W X 0.90 mm H body)
pins: 1 NU, 2 GND, 3 RFIN, 4 GND, 5 VREF, 6 SP1, 7 SP2, 8 VCC2, 9 VCC3, 10 DET, 11 GND, 12 GND, 13 RFOUT, 14 GND, 15 GND, 16 GND, 17 GND, 18 VCC3, 19 VCC2, 20 VCC1, 21 GND

## SKY65162-70LF
designator DA?
400-2700 MHz Linear Power Amplifier; Manufacturer: Skyworks; PartNumber: SKY65162-70LF; ComponentLink1Description: Product Page; ComponentLink1URL: https://www.skyworksinc.com/en/Products/Amplifiers/SKY65162-70LF; ComponentLink2Description: DataSheet; ComponentLink2URL: https://www.skyworksinc.com/-/media/SkyWorks/Documents/Products/401-500/SKY65162_70LF_201212K.pdf
footprint DPAK4P150_409X160L104X55T250X175N (DPAK, 1.50 mm pitch; 3 pin, 2.44 mm L X 4.50 mm W X 1.60 mm H body)
pins: 1 RFIN, 2 GND, 3 RFOUT

## SKY65386-11
designator DA?
2575 to 2735 MHz Variable Gain Amplifier; Manufacturer: Skyworks; PartNumber: SKY65386-11; ComponentLink1Description: Product Page; ComponentLink1URL: https://www.skyworksinc.com/en/Products/Amplifiers/SKY65386-11; ComponentLink2Description: DataSheet; ComponentLink2URL: https://www.skyworksinc.com/-/media/SkyWorks/Documents/Products/1601-1700/SKY65386_11_201729E_Discontinued.pdf
footprint PQFN165P869X869X145_HS-13N (PQFN, 12-Leads, Body 8.69x8.69mm, Pitch 1.65mm/1.91mm, Thermal Pad 4.87x4.87mm, IPC Medium Density)
pins: 1 RFIN, 2 GND, 3 VCTRL, 4 GND, 5 GND, 6 GND, 7 GND, 8 RFOUT, 9 GND, 10 VCC_AMP2, 11 VCC_AMP1, 12 GND, 13 GND

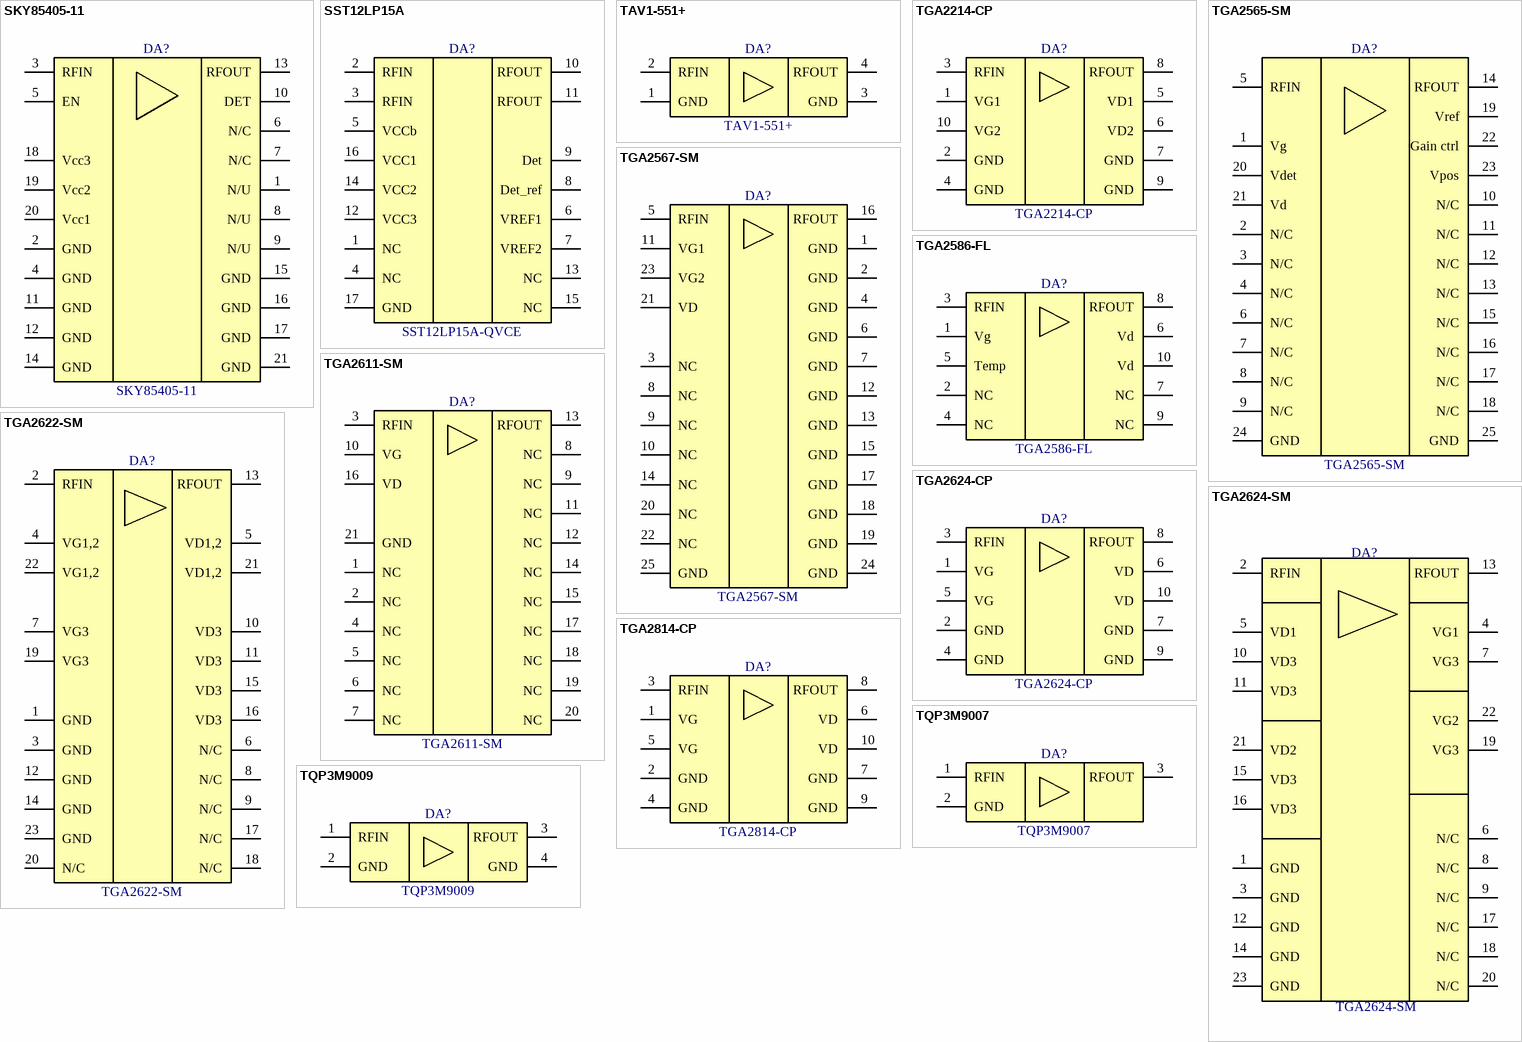
[diagram p31: symbols SKY85405-11 to TQP3M9009]

## SKY85405-11
designator DA?
High-Power Power Amplifier with Integrated Power Detector; Manufacturer: Skyworks; ComponentLink1Description: Product Page; ComponentLink1URL: https://www.skyworksinc.com/en/Products/Amplifiers/SKY85405-11; ComponentLink2Description: DataSheet; ComponentLink2URL: https://www.skyworksinc.com/-/media/SkyWorks/Documents/Products/2201-2300/SKY85405_11_PS_203617A.pdf; ComponentLink3Description: Appnote 1; ComponentLink3URL: https://www.skyworksinc.com/-/media/SkyWorks/Documents/Products/2201-2300/SKY85405_11_203840A_AN.pdf; PartNumber: SKY85405-11
footprint PQFN50P400X400X100_HS-21N (PQFN, 20-Leads, Body 4,00x4,00mm, Pitch 0,50mm, Thermal Pad 2,10x2,10mm, IPC Medium Density)
pins: 1 N/U, 2 GND, 3 RFIN, 4 GND, 5 EN, 6 N/C, 7 N/C, 8 N/U, 9 N/U, 10 DET, 11 GND, 12 GND, 13 RFOUT, 14 GND, 15 GND, 16 GND, 17 GND, 18 Vcc3, 19 Vcc2, 20 Vcc1, 21 GND

## SST12LP15A
designator DA?, comment SST12LP15A-QVCE
2.4 GHz High-Power and High-Gain Power Amplifier; Manufacturer: Microchip; PartNumber: SST12LP15A-QVCE; ComponentLink1Description: Product Page; ComponentLink1URL: https://www.microchip.com/en-us/product/SST12LP15A; ComponentLink2Description: DataSheet; ComponentLink2URL: https://ww1.microchip.com/downloads/aemDocuments/documents/OTH/ProductDocuments/DataSheets/75056A.pdf
footprint QFN17P50_300X300X100L40X24T170N (Quad Flat No-Lead (QFN with Tab), 0.50 mm pitch; square, 4 pin X 4 pin, 3.00 mm L X 3.00 mm W X 1.00 mm H body)
pins: 1 NC, 2 RFIN, 3 RFIN, 4 NC, 5 VCCb, 6 VREF1, 7 VREF2, 8 Det_ref, 9 Det, 10 RFOUT, 11 RFOUT, 12 VCC3, 13 NC, 14 VCC2, 15 NC, 16 VCC1, 17 GND

## TAV1-551+
designator DA?
E-PHEMT Transistor 50Ω 0.045 to 6 GHz; Manufacturer: Mini-Circuits; PartNumber: TAV1-551+; ComponentLink1Description: Product Page; ComponentLink1URL: https://www.minicircuits.com/WebStore/dashboard.html?model=TAV1-551%2B; ComponentLink2Description: DataSheet; ComponentLink2URL: https://www.minicircuits.com/WebStore/dashboardPdf?model=TAV1-551%2B
footprint TE2769 (Mini-Circuits case TE2769)
pins: 1 GND, 2 RFIN, 3 GND, 4 RFOUT

## TGA2214-CP
designator DA?
2 – 18 GHz 4 W GaN Power Amplifier; Manufacturer: Qorvo; PartNumber: TGA2214-CP; ComponentLink1Description: Product Page; ComponentLink1URL: https://www.qorvo.com/products/p/TGA2214-CP; ComponentLink2Description: DataSheet; ComponentLink2URL: https://www.qorvo.com/products/d/da003927
footprint TGA2214-CP (10-lead 15x15 mm  bolt-down package with a Cu base)
pins: 1 VG1, 2 GND, 3 RFIN, 4 GND, 5 VD1, 6 VD2, 7 GND, 8 RFOUT, 9 GND, 10 VG2

## TGA2565-SM
designator DA?
Medium Power Amplifier, 11-17 GHz; Manufacturer: Qorvo; PartNumber: TGA2565-SM; ComponentLink1Description: Product Page; ComponentLink1URL: https://www.qorvo.com/products/p/TGA2565-SM; ComponentLink2Description: DataSheet; ComponentLink2URL: https://www.qorvo.com/products/d/da004100
footprint PQFN50P400X400X90_HS-25N (PQFN, 24-Leads, Body 4,00x4,00mm, Pitch 0,50mm, Thermal Pad 2,60x2,60mm, IPC Medium Density)
pins: 1 Vg, 2 N/C, 3 N/C, 4 N/C, 5 RFIN, 6 N/C, 7 N/C, 8 N/C, 9 N/C, 10 N/C, 11 N/C, 12 N/C, 13 N/C, 14 RFOUT, 15 N/C, 16 N/C, 17 N/C, 18 N/C, 19 Vref, 20 Vdet, 21 Vd, 22 Gain ctrl, 23 Vpos, 24 GND, 25 GND

## TGA2567-SM
designator DA?
2-20 GHz LNA Amplifier; Manufacturer: Qorvo; PartNumber: TGA2567-SM; ComponentLink1Description: Product Page; ComponentLink1URL: https://www.qorvo.com/products/p/TGA2567-SM; ComponentLink2Description: DataSheet; ComponentLink2URL: https://www.qorvo.com/products/d/da004103
footprint TGA2567-SM (Qorvo TGA-2567-SM)
pins: 1 GND, 2 GND, 3 NC, 4 GND, 5 RFIN, 6 GND, 7 GND, 8 NC, 9 NC, 10 NC, 11 VG1, 12 GND, 13 GND, 14 NC, 15 GND, 16 RFOUT, 17 GND, 18 GND, 19 GND, 20 NC, 21 VD, 22 NC, 23 VG2, 24 GND, 25 GND

## TGA2586-FL
designator DA?
7.9 – 8.4 GHz 50W GaN Power Amplifier; Manufacturer: Qorvo; PartNumber: TGA2586-FL; ComponentLink1Description: Product Page; ComponentLink1URL: https://www.qorvo.com/products/p/TGA2586-FL; ComponentLink2Description: DataSheet; ComponentLink2URL: https://www.qorvo.com/products/d/da004158
footprint TGA2586-FL (10 pin CuW-base, flanged  package)
pins: 1 Vg, 2 NC, 3 RFIN, 4 NC, 5 Temp, 6 Vd, 7 NC, 8 RFOUT, 9 NC, 10 Vd

## TGA2611-SM
designator DA?
2-6 GHz GaN LNA; Manufacturer: Qorvo; PartNumber: TGA2611-SM; ComponentLink1Description: Product Page; ComponentLink1URL: https://www.qorvo.com/products/p/TGA2611-SM; ComponentLink2Description: DataSheet; ComponentLink2URL: https://www.qorvo.com/products/d/da004221
footprint QFN21P50_400X400X90L40X25T270N (Quad Flat No-Lead (QFN with Tab), 0.50 mm pitch; square, 5 pin X 5 pin, 4.00 mm L X 4.00 mm W X 0.90 mm H body)
pins: 1 NC, 2 NC, 3 RFIN, 4 NC, 5 NC, 6 NC, 7 NC, 8 NC, 9 NC, 10 VG, 11 NC, 12 NC, 13 RFOUT, 14 NC, 15 NC, 16 VD, 17 NC, 18 NC, 19 NC, 20 NC, 21 GND

## TGA2622-SM
designator DA?
9 – 10 GHz 35 Watt GaN Power Amplifier; Manufacturer: Qorvo; PartNumber: TGA2622-SM; ComponentLink1Description: Product Page; ComponentLink1URL: https://www.qorvo.com/products/p/TGA2622-SM; ComponentLink2Description: DataSheet; ComponentLink2URL: https://www.qorvo.com/products/d/da004272
footprint TGA2622-SM (Qorvo 7x7x1.75 mm Pullback QFN 22L)
pins: 1 GND, 2 RFIN, 3 GND, 4 VG1,2, 5 VD1,2, 6 N/C, 7 VG3, 8 N/C, 9 N/C, 10 VD3, 11 VD3, 12 GND, 13 RFOUT, 14 GND, 15 VD3, 16 VD3, 17 N/C, 18 N/C, 19 VG3, 20 N/C, 21 VD1,2, 22 VG1,2, 23 GND

## TGA2624-CP
designator DA?
9 to 10 GHz, 16 W GaN Power Amplifier; Manufacturer: Qorvo; PartNumber: TGA2624-CP; ComponentLink1Description: Product Page; ComponentLink1URL: https://www.qorvo.com/products/p/TGA2624-CP; ComponentLink2Description: DataSheet; ComponentLink2URL: https://www.qorvo.com/products/d/da004288
footprint TGA2624-CP (10-lead 15x15 mm  bolt-down package with a Cu base)
pins: 1 VG, 2 GND, 3 RFIN, 4 GND, 5 VG, 6 VD, 7 GND, 8 RFOUT, 9 GND, 10 VD

## TGA2624-SM
designator DA?
9 - 10 GHz, 20 Watt GaN Power Amplifier; Manufacturer: Qorvo; PartNumber: TGA2624-SM; ComponentLink1Description: Product Page; ComponentLink1URL: https://www.qorvo.com/products/p/TGA2624-SM; ComponentLink2Description: DataSheet; ComponentLink2URL: https://www.qorvo.com/products/d/da004292
footprint TGA2624-SM (Qorvo TGA2624-SM QFN 7 x 7 x 1.7 mm)
pins: 1 GND, 2 RFIN, 3 GND, 4 VG1, 5 VD1, 6 N/C, 7 VG3, 8 N/C, 9 N/C, 10 VD3, 11 VD3, 12 GND, 13 RFOUT, 14 GND, 15 VD3, 16 VD3, 17 N/C, 18 N/C, 19 VG3, 20 N/C, 21 VD2, 22 VG2, 23 GND

## TGA2814-CP
designator DA?
3.1 to 3.6 GHz, 80W GaN Power Amplifier; Manufacturer: Qorvo; PartNumber: TGA2814-CP; ComponentLink1Description: Product Page; ComponentLink1URL: https://www.qorvo.com/products/p/TGA2814-CP; ComponentLink2Description: DataSheet; ComponentLink2URL: https://www.qorvo.com/products/d/da004392
footprint TGA2814-CP (10-lead 15x15 mm  bolt-down package with a Cu base)
pins: 1 VG, 2 GND, 3 RFIN, 4 GND, 5 VG, 6 VD, 7 GND, 8 RFOUT, 9 GND, 10 VD

## TQP3M9007
designator DA?
100 - 4000 MHz High Linearity Low Noise Amplifier Gain Block; Manufacturer: Qorvo; PartNumber: TQP3M9007; ComponentLink1Description: Product Page; ComponentLink1URL: https://www.qorvo.com/products/p/TQP3M9007; ComponentLink2Description: DataSheet; ComponentLink2URL: https://www.qorvo.com/products/d/da005498
footprint SOT89-150P360X160-3N (SOT89, 3-Leads, Body 4.50x2.45mm, Pitch 1.50mm, Lead Span 3.6mm, IPC Medium Density)
pins: 1 RFIN, 2 GND, 3 RFOUT

## TQP3M9009
designator DA?
High Linearity LNA Gain Block; Manufacturer: Qorvo; PartNumber: TQP3M9009; ComponentLink1Description: Product Page; ComponentLink1URL: https://www.qorvo.com/products/p/TQP3M9009; ComponentLink2Description: DataSheet; ComponentLink2URL: https://www.qorvo.com/products/d/da005510
footprint DPAK4P150_512X160L104X46T320X183N (DPAK, 1.50 mm pitch; 3 pin, 2.45 mm L X 4.50 mm W X 1.60 mm H body)
pins: 1 RFIN, 2 GND, 3 RFOUT, 4 GND


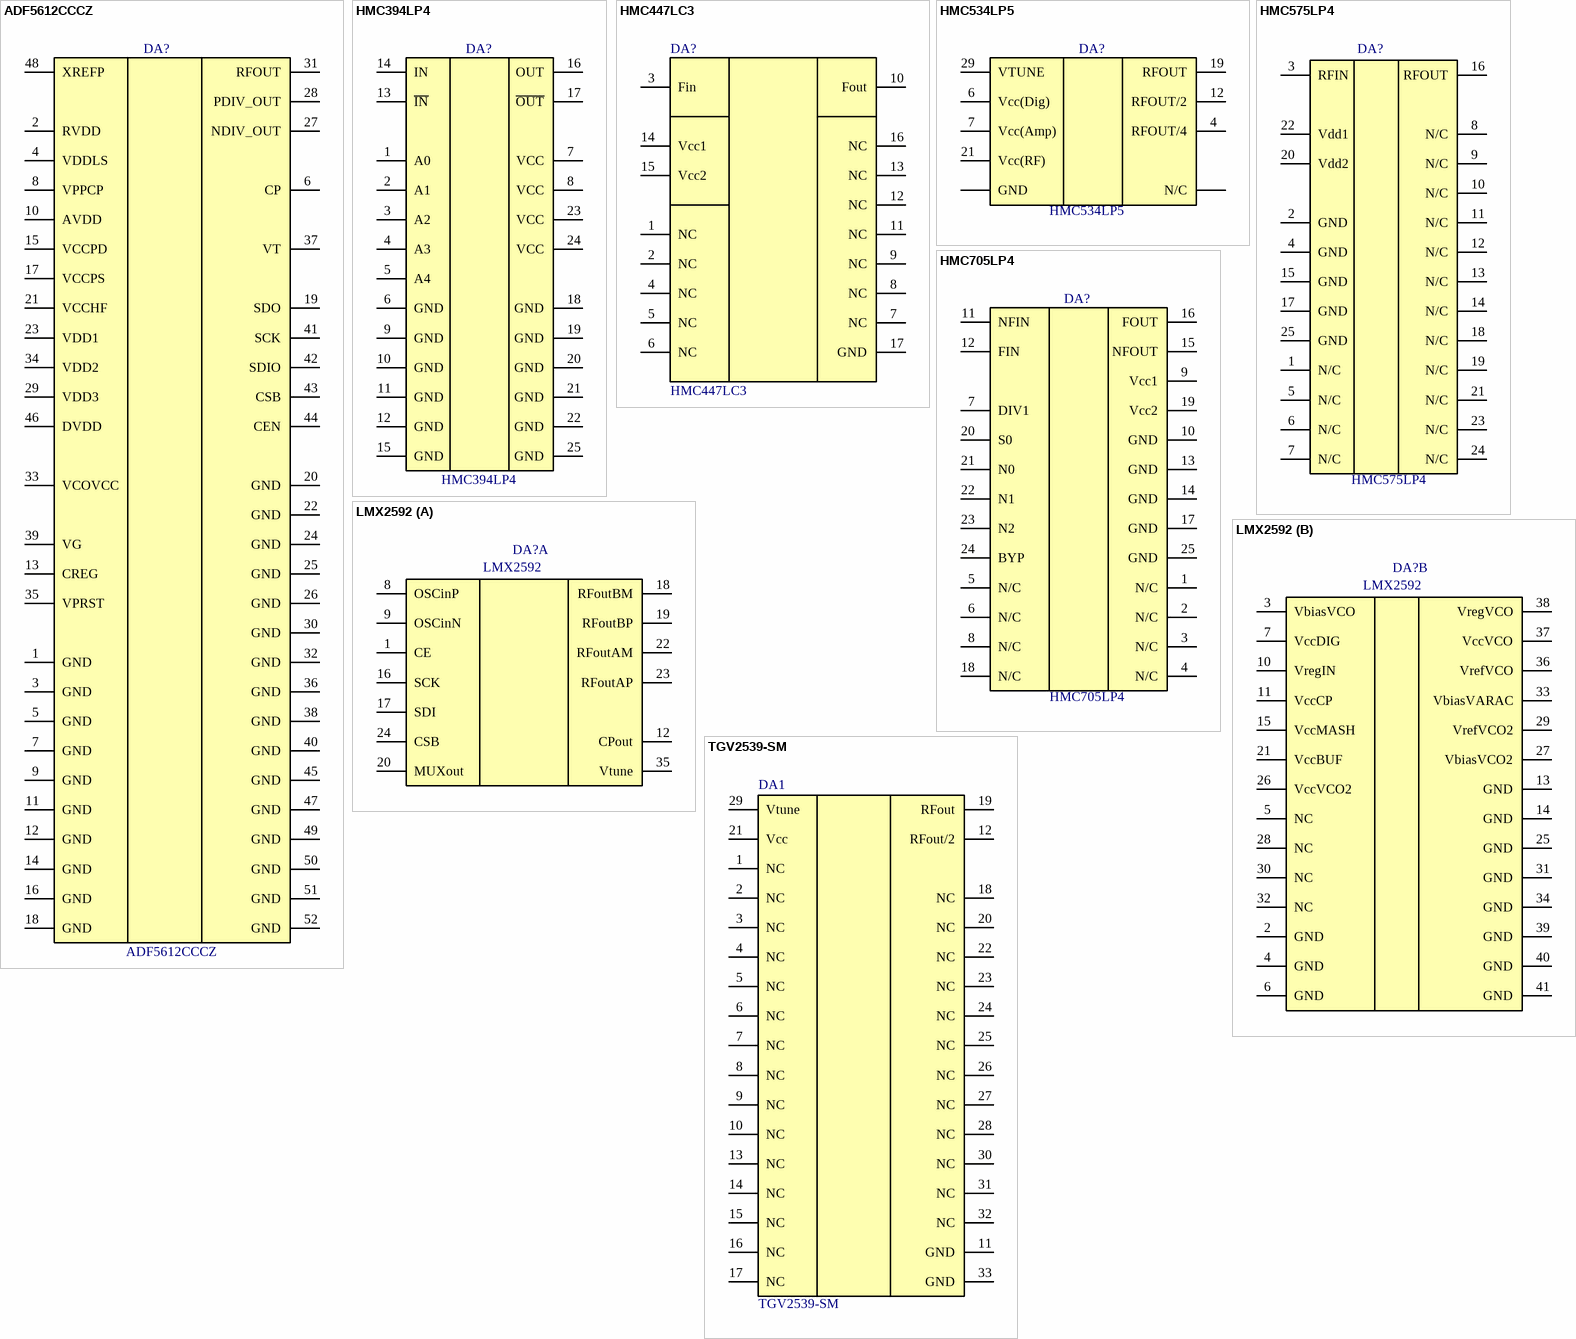
[diagram p32: symbols ADF5612CCCZ to TGV2539-SM]

## ADF5612CCCZ
designator DA?
Microwave Wideband Synthesizer with Integrated VCO; Manufacturer: Analog Devices; PartNumber: ADF5612CCCZ; ComponentLink1Description: Product Page; ComponentLink1URL: https://www.analog.com/en/products/adf5612.html; ComponentLink2Description: DataSheet; ComponentLink2URL: https://www.analog.com/media/en/technical-documentation/data-sheets/adf5612.pdf
footprint AD LGA CC-48-14 (48-Terminal Land Grid Array [LGA] (CC-48-14))
pins: 1 GND, 2 RVDD, 3 GND, 4 VDDLS, 5 GND, 6 CP, 7 GND, 8 VPPCP, 9 GND, 10 AVDD, 11 GND, 12 GND, 13 CREG, 14 GND, 15 VCCPD, 16 GND, 17 VCCPS, 18 GND, 19 SDO, 20 GND, 21 VCCHF, 22 GND, 23 VDD1, 24 GND, 25 GND, 26 GND, 27 NDIV_OUT, 28 PDIV_OUT, 29 VDD3, 30 GND, 31 RFOUT, 32 GND, 33 VCOVCC, 34 VDD2, 35 VPRST, 36 GND, 37 VT, 38 GND, 39 VG, 40 GND, 41 SCK, 42 SDIO, 43 CSB, 44 CEN, 45 GND, 46 DVDD, 47 GND, 48 XREFP, 49 GND, 50 GND, 51 GND, 52 GND

## HMC394LP4
designator DA?
Programmable 5-Bit Counter SMT, DC - 2.2 GHz; Manufacturer: Analog Devices; PartNumber: HMC394LP4; ComponentLink1Description: Product Page; ComponentLink1URL: https://www.analog.com/en/products/hmc394.html; ComponentLink2Description: DataSheet; ComponentLink2URL: https://www.analog.com/media/en/technical-documentation/data-sheets/hmc394.pdf
footprint QFN25P50_400X400X100L40X24T280N (Quad Flat No-Lead (QFN with Tab), 0.50 mm pitch; square, 6 pin X 6 pin, 4.00 mm L X 4.00 mm W X 1.00 mm H body)
pins: 1 A0, 2 A1, 3 A2, 4 A3, 5 A4, 6 GND, 7 VCC, 8 VCC, 9 GND, 10 GND, 11 GND, 12 GND, 13 ~{IN}, 14 IN, 15 GND, 16 OUT, 17 ~{OUT}, 18 GND, 19 GND, 20 GND, 21 GND, 22 GND, 23 VCC, 24 VCC, 25 GND

## HMC447LC3
designator DA?
10 to 26 GHz Divide-By-4; Manufacturer: Analog Devices; PartNumber: HMC447LC3; ComponentLink1Description: Product Page; ComponentLink1URL: https://www.analog.com/en/products/hmc447.html; ComponentLink2Description: DataSheet; ComponentLink2URL: https://www.analog.com/media/en/technical-documentation/data-sheets/hmc447.pdf
footprint QFN17P50_300X300X100L40X24T170N (Quad Flat No-Lead (QFN with Tab), 0.50 mm pitch; square, 4 pin X 4 pin, 3.00 mm L X 3.00 mm W X 1.00 mm H body)
pins: 1 NC, 2 NC, 3 Fin, 4 NC, 5 NC, 6 NC, 7 NC, 8 NC, 9 NC, 10 Fout, 11 NC, 12 NC, 13 NC, 14 Vcc1, 15 Vcc2, 16 NC, 17 GND

## HMC534LP5
designator DA?
MMIC VCO w/ HALF FREQUENCY OUTPUT / & DIVIDE-BY-4, 10.6 - 11.8 GHz; Manufacturer: Analog Devices; PartNumber: HMC534LP5; ComponentLink1Description: Product Page; ComponentLink1URL: https://www.analog.com/en/products/hmc534.html; ComponentLink2Description: DataSheet; ComponentLink2URL: https://www.analog.com/media/en/technical-documentation/data-sheets/hmc534.pdf
footprint QFN33P50_500X500X100L40X24T380N (Quad Flat No-Lead (QFN with Tab), 0.50 mm pitch; square, 8 pin X 8 pin, 5.00 mm L X 5.00 mm W X 1.00 mm H body)
pins: 1, 2, 3, 8, 9, 10, 13, 14, 15, 16, 17, 18, 20, 22, 23, 24, 25, 26, 27, 28, 30, 31, 32 N/C, 4 RFOUT/4, 5, 11, 33 GND, 6 Vcc(Dig), 7 Vcc(Amp), 12 RFOUT/2, 19 RFOUT, 21 Vcc(RF), 29 VTUNE

## HMC575LP4
designator DA?
SMT GaAs MMIC x2 ACTIVE FREQUENCY / MULTIPLIER, 6 - 9 GHz OUTPUT; Manufacturer: Analog Devices; PartNumber: HMC575LP4; ComponentLink1Description: Product Page; ComponentLink1URL: https://www.analog.com/en/products/hmc575.html; ComponentLink2Description: DataSheet; ComponentLink2URL: https://www.analog.com/media/en/technical-documentation/data-sheets/hmc575.pdf
footprint QFN25P50_400X400X100L40X24T280N (Quad Flat No-Lead (QFN with Tab), 0.50 mm pitch; square, 6 pin X 6 pin, 4.00 mm L X 4.00 mm W X 1.00 mm H body)
pins: 1 N/C, 2 GND, 3 RFIN, 4 GND, 5 N/C, 6 N/C, 7 N/C, 8 N/C, 9 N/C, 10 N/C, 11 N/C, 12 N/C, 13 N/C, 14 N/C, 15 GND, 16 RFOUT, 17 GND, 18 N/C, 19 N/C, 20 Vdd2, 21 N/C, 22 Vdd1, 23 N/C, 24 N/C, 25 GND

## HMC705LP4
designator DA?
6.5 GHz PROGRAMMABLE DIVIDER (N = 1 - 17); Manufacturer: Analog Devices; PartNumber: HMC705LP4; ComponentLink1Description: Product Page; ComponentLink1URL: https://www.analog.com/en/products/hmc705.html; ComponentLink2Description: DataSheet; ComponentLink2URL: https://www.analog.com/media/en/technical-documentation/data-sheets/hmc705.pdf
footprint QFN25P50_400X400X100L40X24T280N (Quad Flat No-Lead (QFN with Tab), 0.50 mm pitch; square, 6 pin X 6 pin, 4.00 mm L X 4.00 mm W X 1.00 mm H body)
pins: 1 N/C, 2 N/C, 3 N/C, 4 N/C, 5 N/C, 6 N/C, 7 DIV1, 8 N/C, 9 Vcc1, 10 GND, 11 NFIN, 12 FIN, 13 GND, 14 GND, 15 NFOUT, 16 FOUT, 17 GND, 18 N/C, 19 Vcc2, 20 S0, 21 N0, 22 N1, 23 N2, 24 BYP, 25 GND

## LMX2592
designator DA?
9.8-GHz wideband frequency synthesizer with integrated VCO; Manufacturer: Texas Instruments; PartNumber: LMX2592; ComponentLink1Description: Product Page; ComponentLink1URL: https://www.ti.com/product/LMX2592; ComponentLink2Description: DataSheet; ComponentLink2URL: https://www.ti.com/lit/gpn/lmx2592
footprint QFN41P50_600X600X100L40X25T450N (Quad Flat No-Lead (QFN with Tab), 0.50 mm pitch; square, 10 pin X 10 pin, 6.00 mm L X 6.00 mm W X 1.00 mm H body)
part A pins: 1 CE, 8 OSCinP, 9 OSCinN, 12 CPout, 16 SCK, 17 SDI, 18 RFoutBM, 19 RFoutBP, 20 MUXout, 22 RFoutAM, 23 RFoutAP, 24 CSB, 35 Vtune
part B pins: 2 GND, 3 VbiasVCO, 4 GND, 5 NC, 6 GND, 7 VccDIG, 10 VregIN, 11 VccCP, 13 GND, 14 GND, 15 VccMASH, 21 VccBUF, 25 GND, 26 VccVCO2, 27 VbiasVCO2, 28 NC, 29 VrefVCO2, 30 NC, 31 GND, 32 NC, 33 VbiasVARAC, 34 GND, 36 VrefVCO, 37 VccVCO, 38 VregVCO, 39 GND, 40 GND, 41 GND

## TGV2539-SM
designator DA1
10.7 – 11.5 GHz VCO with Divide by 2; Manufacturer: Qorvo; PartNumber: TGV2539-SM; ComponentLink1Description: DataSheet; ComponentLink1URL: https://www.qorvo.com/products/d/da005181
footprint QFN33P50_500X500X90L40X25T370N (Quad Flat No-Lead (QFN with Tab), 0.50 mm pitch; square, 8 pin X 8 pin, 5.00 mm L X 5.00 mm W X 0.90 mm H body)
pins: 1 NC, 2 NC, 3 NC, 4 NC, 5 NC, 6 NC, 7 NC, 8 NC, 9 NC, 10 NC, 11 GND, 12 RFout/2, 13 NC, 14 NC, 15 NC, 16 NC, 17 NC, 18 NC, 19 RFout, 20 NC, 21 Vcc, 22 NC, 23 NC, 24 NC, 25 NC, 26 NC, 27 NC, 28 NC, 29 Vtune, 30 NC, 31 NC, 32 NC, 33 GND


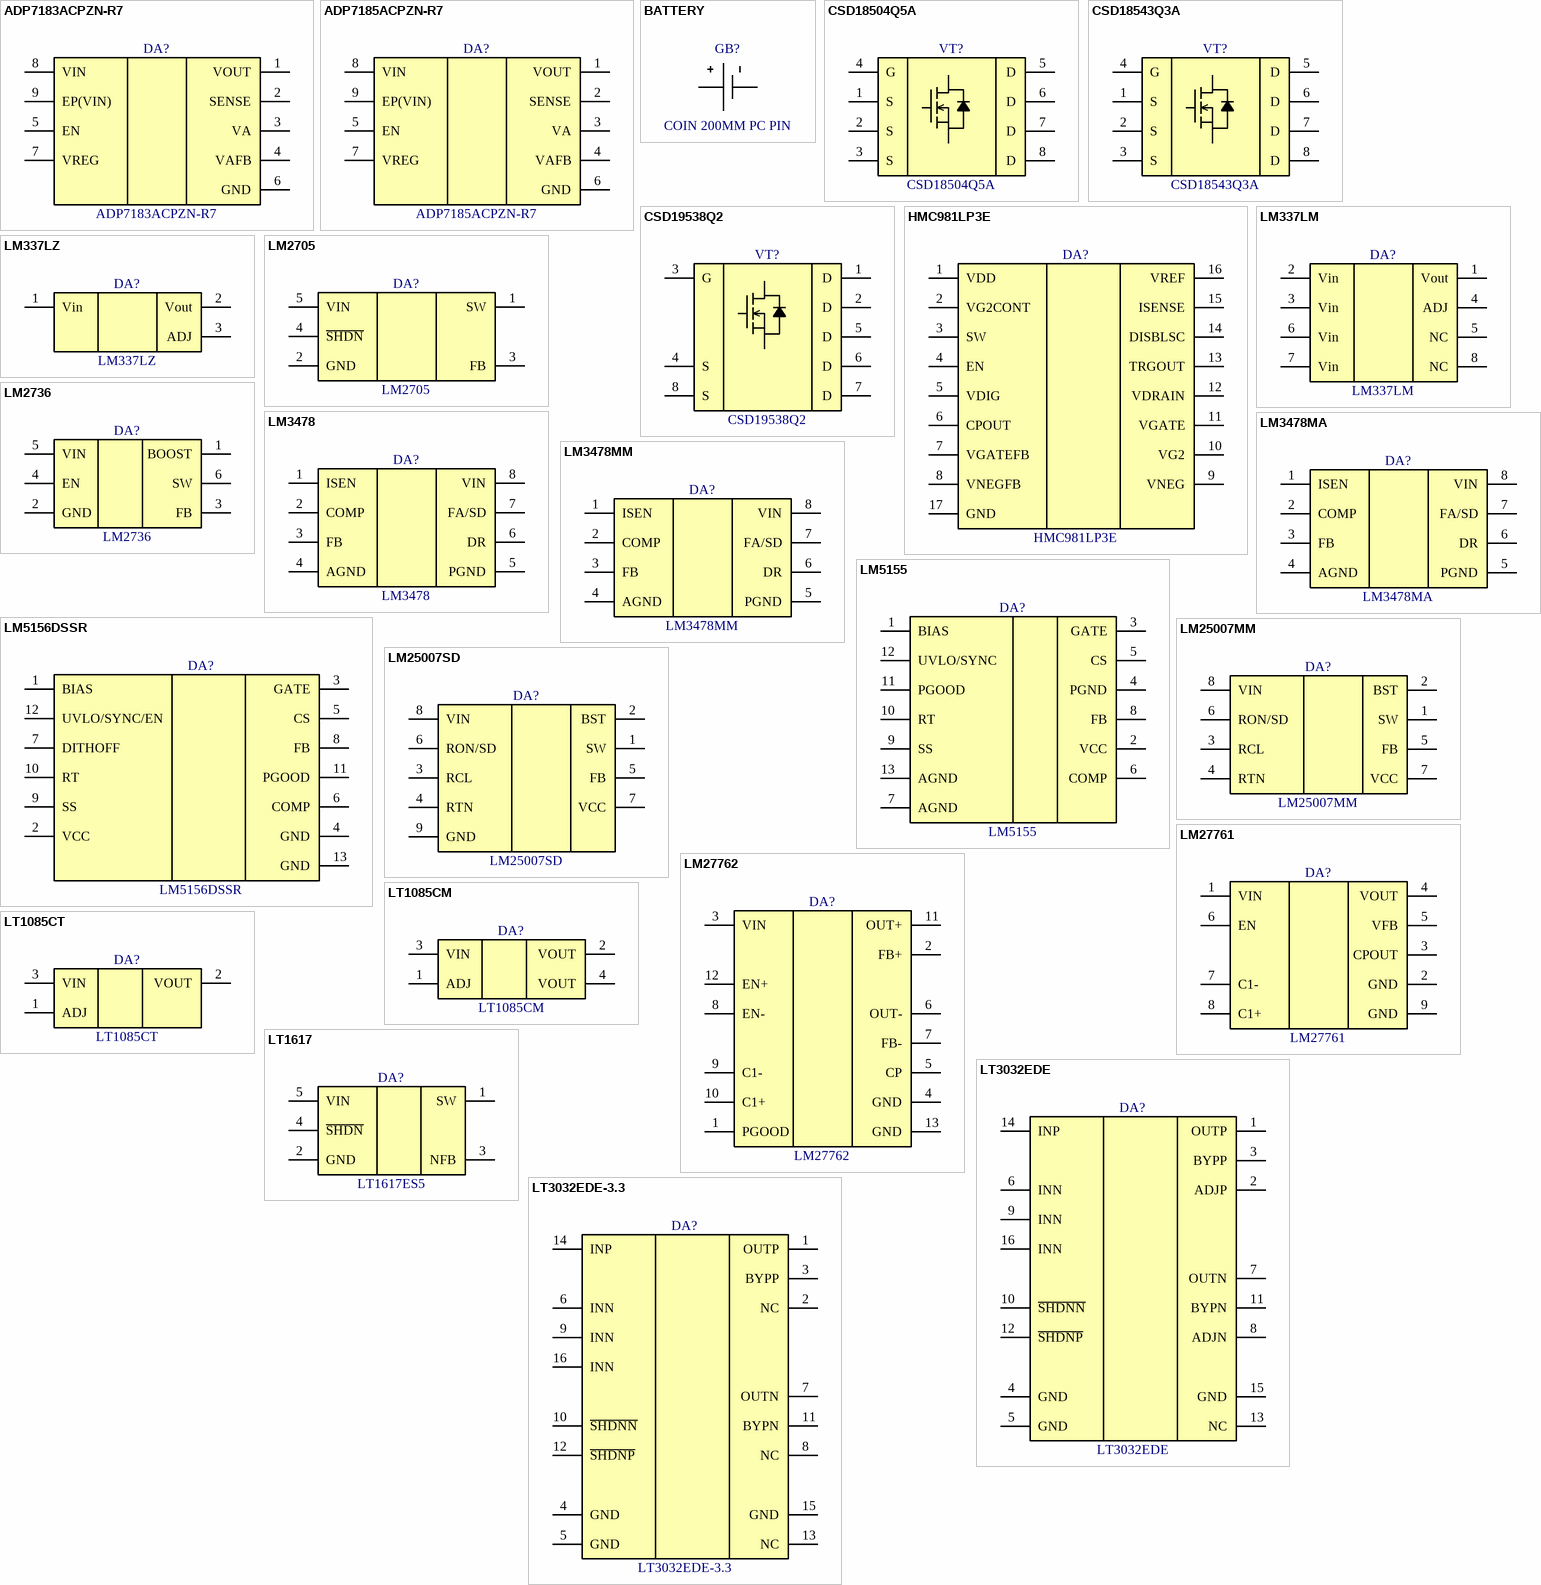
[diagram p33: symbols ADP7183ACPZN-R7 to LT3032EDE-3.3]

## ADP7183ACPZN-R7
designator DA?
−300 mA, Ultralow Noise, High PSRR, Low Dropout Linear Regulator, Adj.; Manufacturer: Analog Devices; PartNumber: ADP7183ACPZN-R7; ComponentLink1Description: Product Page; ComponentLink1URL: https://www.analog.com/en/products/ADP7183.html; ComponentLink2Description: DataSheet; ComponentLink2URL: https://www.analog.com/media/en/technical-documentation/data-sheets/ADP7183.pdf
footprint SON9P50_200X200X60L25X25T150X100N (Small Outline No-Lead (SON with Tab), 0.50 mm pitch; 8 pin, 2.00 mm L X 2.00 mm W X 0.60 mm H body)
pins: 1 VOUT, 2 SENSE, 3 VA, 4 VAFB, 5 EN, 6 GND, 7 VREG, 8 VIN, 9 EP(VIN)

## ADP7185ACPZN-R7
designator DA?
−300 mA, Ultralow Noise, High PSRR, Low Dropout Linear Regulator, Adj.; Manufacturer: Analog Devices; PartNumber: ADP7185ACPZN-R7; ComponentLink1Description: Product Page; ComponentLink1URL: https://www.analog.com/en/products/adp7185.html; ComponentLink2Description: DataSheet; ComponentLink2URL: https://www.analog.com/media/en/technical-documentation/data-sheets/ADP7185.pdf
footprint SON9P50_200X200X60L25X25T150X100N (Small Outline No-Lead (SON with Tab), 0.50 mm pitch; 8 pin, 2.00 mm L X 2.00 mm W X 0.60 mm H body)
pins: 1 VOUT, 2 SENSE, 3 VA, 4 VAFB, 5 EN, 6 GND, 7 VREG, 8 VIN, 9 EP(VIN)

## BATTERY
designator GB?, comment COIN 200MM PC PIN
Battery Holder; PartNumber: 120591-1; Manufacturer: TE Connectivity; BatteryType: COIN 200MM PC PIN; ComponentLink1Description: Product Page; ComponentLink1URL: https://www.te.com/usa-en/product-120591-1.html; ComponentLink2Description: DataSheet; ComponentLink2URL: https://www.te.com/usa-en/product-120591-1.datasheet.pdf
footprint TECO-120591-1-2_V (Lithium Battery Holder)
pins: 1, 2

## CSD18504Q5A
designator VT?
40-V N-Channel NexFET™ Power MOSFET; Manufacturer: Texas Instruments; PartNumber: CSD18504Q5A; ComponentLink1Description: Product Page; ComponentLink1URL: https://www.ti.com/product/CSD18504Q5A; ComponentLink2Description: DataSheet; ComponentLink2URL: https://www.ti.com/lit/gpn/csd18504q5a
footprint CSD18504Q5A (Texus Instruments Q5A Package)
pins: 1 S, 2 S, 3 S, 4 G, 5 D, 6 D, 7 D, 8 D

## CSD18543Q3A
designator VT?
60-V N-Channel NexFET™ Power MOSFET; Manufacturer: Texas Instruments; PartNumber: CSD18543Q3A; ComponentLink1Description: Product Page; ComponentLink1URL: https://www.ti.com/product/CSD18543Q3A; ComponentLink2Description: DataSheet; ComponentLink2URL: https://www.ti.com/lit/gpn/csd18543q3a
footprint CSD18543Q3A (Texas Instruments Q3A Package)
pins: 1 S, 2 S, 3 S, 4 G, 5 D, 6 D, 7 D, 8 D

## CSD19538Q2
designator VT?
100-V, N channel NexFET™ power MOSFET, single SON 2 mm x 2 mm, 59 mOhm; Manufacturer: Texas Instruments; PartNumber: CSD19538Q2; ComponentLink1Description: Product Page; ComponentLink1URL: https://www.ti.com/product/CSD19538Q2; ComponentLink2Description: DataSheet; ComponentLink2URL: https://www.ti.com/lit/gpn/csd19538q2
footprint TI DQK S-PWSON-N6 (TI Plastic Small Outline No-Lead 6pins, 2 gnd)
pins: 1 D, 2 D, 3 G, 4 S, 5 D, 6 D, 7 D, 8 S

## HMC981LP3E
designator DA?
ACTIVE BIAS CONTROLLER; Manufacturer: Analog Devices; PartNumber: HMC981LP3E; ComponentLink1Description: Product Page; ComponentLink1URL: https://www.analog.com/en/products/hmc981lp3e.html; ComponentLink2Description: DataSheet; ComponentLink2URL: https://www.analog.com/media/en/technical-documentation/data-sheets/hmc981.pdf
footprint QFN17P50_300X300X100L40X24T173N (Quad Flat No-Lead (QFN with Tab), 0.50 mm pitch; square, 4 pin X 4 pin, 3.00 mm L X 3.00 mm W X 1.00 mm H body)
pins: 1 VDD, 2 VG2CONT, 3 SW, 4 EN, 5 VDIG, 6 CPOUT, 7 VGATEFB, 8 VNEGFB, 9 VNEG, 10 VG2, 11 VGATE, 12 VDRAIN, 13 TRGOUT, 14 DISBLSC, 15 ISENSE, 16 VREF, 17 GND

## LM337LM
designator DA?
Negative 3-Terminal Adjustable Regulator, SOIC; Manufacturer: Texas Instruments; ComponentLink1Description: Product Page; ComponentLink1URL: https://www.ti.com/product/LM337L; PartNumber: LM337LM; ComponentLink2Description: DataSheet; ComponentLink2URL: https://www.ti.com/lit/gpn/lm337l
footprint SOIC8P127_490X600X175L83X41N (Small Outline IC (SOIC), 1.27 mm pitch; 8 pin, 4.90 mm L X 3.90 mm W X 1.75 mm H body)
pins: 1 Vout, 2 Vin, 3 Vin, 4 ADJ, 5 NC, 6 Vin, 7 Vin, 8 NC

## LM337LZ
designator DA?
Negative 3-Terminal Adjustable Regulator, TO-92; Manufacturer: Texas Instruments; ComponentLink1Description: Product Page; ComponentLink1URL: https://www.ti.com/product/LM337L; PartNumber: LM337LZ; ComponentLink2Description: DataSheet; ComponentLink2URL: https://www.ti.com/lit/gpn/lm337l
footprint TI TO-92 5.34 mm LP0003A
footprint TI TO-92 5.34 mm LP0003A_wide_2.6mm
pins: 1 Vin, 2 Vout, 3 ADJ

## LM2705
designator DA?
Micropower Step-Up DC-DC Converter With 150-mA Peak Current Limit; Manufacturer: Texas Instruments; PartNumber: LM2705; ComponentLink1Description: Product Page; ComponentLink1URL: https://www.ti.com/product/LM2705; ComponentLink2Description: DataSheet; ComponentLink2URL: https://www.ti.com/lit/gpn/lm2705
footprint SOT23-5P95_280X145L60X40N (Small Outline Transistor (SOT23), 0.95 mm pitch; 5 pin, 2.90 mm L X 1.60 mm W X 1.45 mm H body)
pins: 1 SW, 2 GND, 3 FB, 4 ~{SHDN}, 5 VIN

## LM2736
designator DA?
LM2736Thin SOT 750 mA Load Step-DownDC-DCRegulator; Manufacturer: Texas Instruments; PartNumber: LM2736; ComponentLink1Description: Product Page; ComponentLink1URL: https://www.ti.com/product/LM2736; ComponentLink2Description: DataSheet; ComponentLink2URL: https://www.ti.com/lit/gpn/lm2736
footprint SOT23-6P95_280X110L45X40N (Small Outline Transistor (SOT23), 0.95 mm pitch; 6 pin, 2.90 mm L X 1.60 mm W X 1.10 mm H body)
pins: 1 BOOST, 2 GND, 3 FB, 4 EN, 5 VIN, 6 SW

## LM3478
designator DA?
High-Efficiency Low-Side N-Channel Controller for Switching Regulator; Manufacturer: Texas Instruments; PartNumber: LM3478; ComponentLink1Description: Product Page; ComponentLink1URL: https://www.ti.com/product/LM3478; ComponentLink2Description: DataSheet; ComponentLink2URL: https://www.ti.com/lit/gpn/lm3478
footprint SOIC8P127_490X600X175L83X41N (Small Outline IC (SOIC), 1.27 mm pitch; 8 pin, 4.90 mm L X 3.90 mm W X 1.75 mm H body)
footprint SOP8P65_300X490X110L55X31N (Small Outline Pkg (SOP), 0.65 mm pitch; 8 pin, 3.00 mm L X 3.00 mm W X 1.10 mm H body)
pins: 1 ISEN, 2 COMP, 3 FB, 4 AGND, 5 PGND, 6 DR, 7 FA/SD, 8 VIN

## LM3478MA
designator DA?
High-Efficiency Low-Side N-Channel Controller for Switching Regulator, SOIC-8; Manufacturer: Texas Instruments; PartNumber: LM3478MA; ComponentLink1Description: Product Page; ComponentLink1URL: https://www.ti.com/product/LM3478; ComponentLink2Description: DataSheet; ComponentLink2URL: https://www.ti.com/lit/gpn/lm3478
footprint SOIC8P127_490X600X175L83X41N (Small Outline IC (SOIC), 1.27 mm pitch; 8 pin, 4.90 mm L X 3.90 mm W X 1.75 mm H body)
pins: 1 ISEN, 2 COMP, 3 FB, 4 AGND, 5 PGND, 6 DR, 7 FA/SD, 8 VIN

## LM3478MM
designator DA?
High-Efficiency Low-Side N-Channel Controller for Switching Regulator, VSSOP-8; Manufacturer: Texas Instruments; PartNumber: LM3478MM; ComponentLink1Description: Product Page; ComponentLink1URL: https://www.ti.com/product/LM3478; ComponentLink2Description: DataSheet; ComponentLink2URL: https://www.ti.com/lit/gpn/lm3478
footprint SOP8P65_300X490X110L55X31N (Small Outline Pkg (SOP), 0.65 mm pitch; 8 pin, 3.00 mm L X 3.00 mm W X 1.10 mm H body)
pins: 1 ISEN, 2 COMP, 3 FB, 4 AGND, 5 PGND, 6 DR, 7 FA/SD, 8 VIN